# Altium integrated library amin-lib.IntLib: 231 symbols (part 2 of 2)
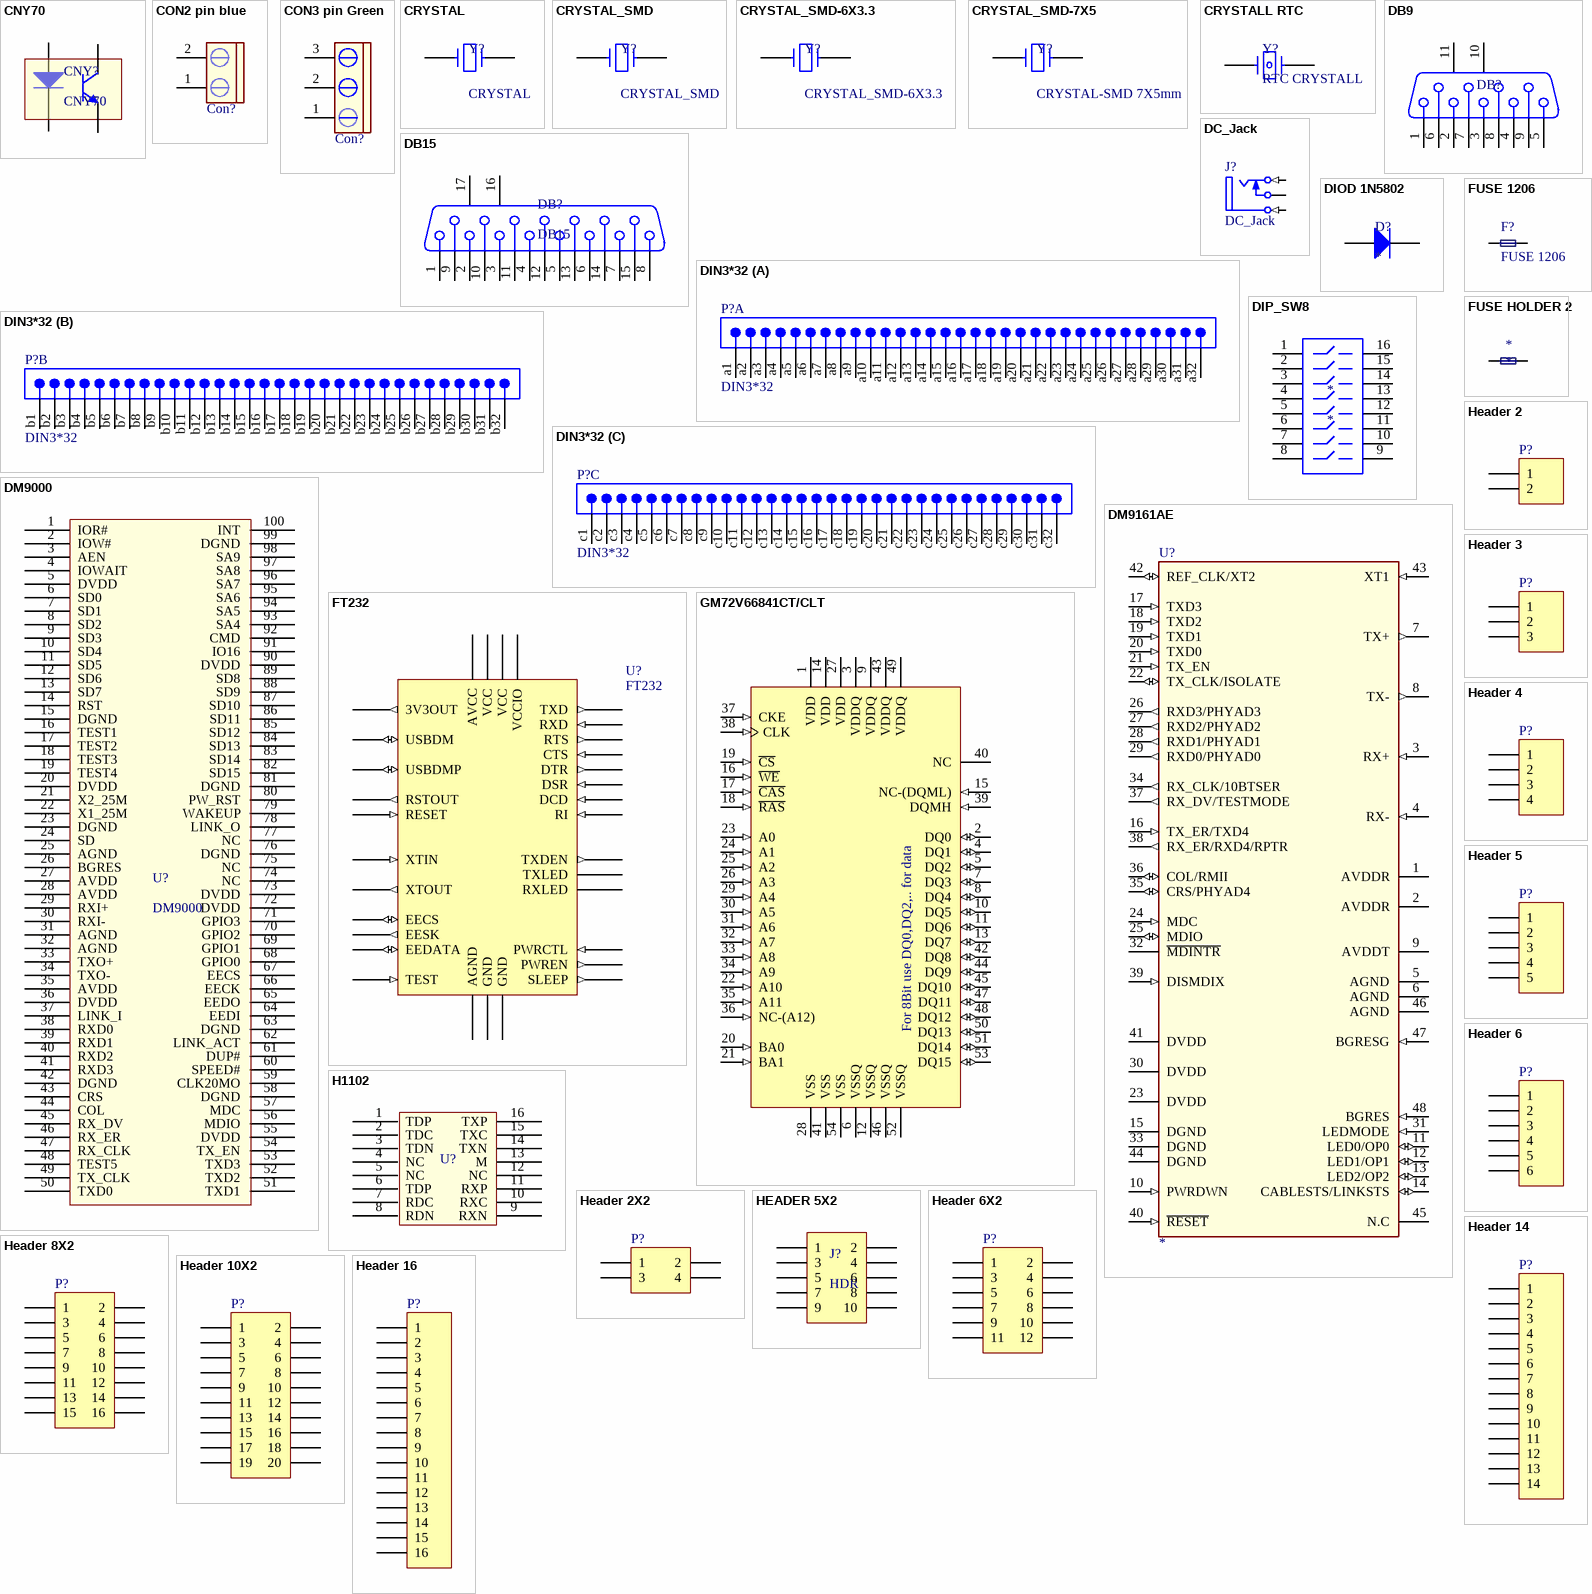
[diagram p12: symbols CNY70 to Header 16]

## DIN3*32
designator P?
Eurocard DIN 41612, Type C, 96 Position, Rows a+b+c, Performance level 1, Male, Lead 3.0 mm, Pitch 2.54 mm; DrillSize: Corresponds to nominal value.; Published: 6-Oct-2005; DatasheetDocument: 02-Jun-2003; PackageDocument: 03-Jul-2000; PackageReference: 0903196x922; Publisher: Altium Limited; ComponentLink1Description: Manufacturer Link; ComponentLink1URL: http://www.harting.com/; ComponentLink2Description: Packaging Specification; ComponentLink2URL: http://www.harkis.harting.com/_gds/pdf/TB_0903196x922_BL01_R27486.pdf
footprint DIN3*32_FOOT
footprint DIN3*32_FOOT - SIM
footprint DIN3*32_FOOT MRA
part A pins: a1, a2, a3, a4, a5, a6, a7, a8, a9, a10, a11, a12, a13, a14, a15, a16, a17, a18, a19, a20, a21, a22, a23, a24, a25, a26, a27, a28, a29, a30, a31, a32
part B pins: b1, b2, b3, b4, b5, b6, b7, b8, b9, b10, b11, b12, b13, b14, b15, b16, b17, b18, b19, b20, b21, b22, b23, b24, b25, b26, b27, b28, b29, b30, b31, b32
part C pins: c1, c2, c3, c4, c5, c6, c7, c8, c9, c10, c11, c12, c13, c14, c15, c16, c17, c18, c19, c20, c21, c22, c23, c24, c25, c26, c27, c28, c29, c30, c31, c32

## DIOD 1N5802
designator D?
footprint MY_DIOD_1N5822
pins: 1 A, 2 K

## DIP_SW8
designator *
footprint MY_DIP_SW8 (DIP SWITCH 8 PIN)
pins: 1, 2, 3, 4, 5, 6, 7, 8, 9, 10, 11, 12, 13, 14, 15, 16

## DM9000
designator U?
ETHERNET PHY LAYER
footprint MY_LQFP100
pins: 1 IOR#, 2 IOW#, 3 AEN, 4 IOWAIT, 5 DVDD, 6 SD0, 7 SD1, 8 SD2, 9 SD3, 10 SD4, 11 SD5, 12 SD6, 13 SD7, 14 RST, 15 DGND, 16 TEST1, 17 TEST2, 18 TEST3, 19 TEST4, 20 DVDD, 21 X2_25M, 22 X1_25M, 23 DGND, 24 SD, 25 AGND, 26 BGRES, 27 AVDD, 28 AVDD, 29 RXI+, 30 RXI-, 31 AGND, 32 AGND, 33 TXO+, 34 TXO-, 35 AVDD, 36 DVDD, 37 LINK_I, 38 RXD0, 39 RXD1, 40 RXD2, 41 RXD3, 42 DGND, 43 CRS, 44 COL, 45 RX_DV, 46 RX_ER, 47 RX_CLK, 48 TEST5, 49 TX_CLK, 50 TXD0, 51 TXD1, 52 TXD2, 53 TXD3, 54 TX_EN, 55 DVDD, 56 MDIO, 57 MDC, 58 DGND, 59 CLK20MO, 60 SPEED#, 61 DUP#, 62 LINK_ACT, 63 DGND, 64 EEDI, 65 EEDO, 66 EECK, 67 EECS, 68 GPIO0, 69 GPIO1, 70 GPIO2, 71 GPIO3, 72 DVDD, 73 DVDD, 74 NC, 75 NC, 76 DGND, 77 NC, 78 LINK_O, 79 WAKEUP, 80 PW_RST, 81 DGND, 82 SD15, 83 SD14, 84 SD13, 85 SD12, 86 SD11, 87 SD10, 88 SD9, 89 SD8, 90 DVDD, 91 IO16, 92 CMD, 93 SA4, 94 SA5, 95 SA6, 96 SA7, 97 SA8, 98 SA9, 99 DGND, 100 INT

## DM9161AE
designator U?
Ethernet PHY
footprint MY_LQFP48 (TSQFP, 48-Leads, Body 9.0x9.0mm (max), Pitch 0.50mm, IPC Medium Density)
3D model AT90C8534-48A (PCB3D Model)
pins: 1 AVDDR (power), 2 AVDDR (power), 3 RX+ (in), 4 RX- (in), 5 AGND (power), 6 AGND (power), 7 TX+ (out), 8 TX- (out), 9 AVDDT (power), 10 PWRDWN (in), 11 LED0/OP0 (io), 12 LED1/OP1 (io), 13 LED2/OP2 (io), 14 CABLESTS/LINKSTS (io), 15 DGND (power), 16 TX_ER/TXD4 (in), 17 TXD3 (in), 18 TXD2 (in), 19 TXD1 (in), 20 TXD0 (in), 21 TX_EN (in), 22 TX_CLK/ISOLATE (io), 23 DVDD (power), 24 MDC (in), 25 MDIO (io), 26 RXD3/PHYAD3 (out), 27 RXD2/PHYAD2 (out), 28 RXD1/PHYAD1 (out), 29 RXD0/PHYAD0 (out), 30 DVDD (power), 31 LEDMODE (in), 32 ~{MDINTR} (hiz), 33 DGND (power), 34 RX_CLK/10BTSER (out), 35 CRS/PHYAD4 (io), 36 COL/RMII (io), 37 RX_DV/TESTMODE (out), 38 RX_ER/RXD4/RPTR (out), 39 DISMDIX (in), 40 ~{RESET} (in), 41 DVDD (power), 42 REF_CLK/XT2 (io), 43 XT1 (in), 44 DGND (power), 45 N.C, 46 AGND (power), 47 BGRESG (in), 48 BGRES (in)

## FT232
designator U?
USB to RS232 Convertor
footprint My_TQFP-32
pins: 1 EESK (out), 2 EEDATA (io), 3 VCC (power), 4 RESET (in), 5 RSTOUT (out), 6 3V3OUT (out), 7 USBDMP (io), 8 USBDM (io), 9 GND (power), 10 SLEEP (out), 11 RXLED (oc), 12 TXLED (oc), 13 VCCIO (power), 14 PWRCTL (in), 15 PWREN (out), 16 TXDEN (out), 17 GND (power), 18 RI (in), 19 DCD (in), 20 DSR (in), 21 DTR (out), 22 CTS (in), 23 RTS (out), 24 RXD (in), 25 TXD (out), 26 VCC (power), 27 XTIN (in), 28 XTOUT (out), 29 AGND (power), 30 AVCC (power), 31 TEST (in), 32 EECS (io)

## FUSE 1206
designator F?
footprint FUSE1206
pins: 1, 2

## FUSE HOLDER 2
designator *
footprint FUSE_HOLDER 2
pins: 1, 2

## GM72V66841CT/CLT
designator U?
2,097,152 WORD x 8 BIT x 4 BANK  SYNCHRONOUS DYNAMIC RAM
footprint MY_TSOP_54
pins: 1 VDD (power) "Power Supply", 2 DQ0 (io) "Data Input/Output 0", 3 VDDQ (power) "DQ Power", 4 DQ1 (io) "Data Input/Output 1", 5 DQ2 (io) "Data Input/Output 2", 6 VSSQ (power) "DQ Ground", 7 DQ3 (io) "Data Input/Output 3", 8 DQ4 (io) "Data Input/Output 4", 9 VDDQ (power) "DQ Power", 10 DQ5 (io) "Data Input/Output 5", 11 DQ6 (io) "Data Input/Output 6", 12 VSSQ (power) "DQ Ground", 13 DQ7 (io) "Data Input/Output 7", 14 VDD (power) "Power Supply", 15 NC-(DQML) (in) "Input/Output Mask for DQ0-DQ7", 16 ~{WE} (in) "Command Input", 17 ~{CAS} (in) "Command Input", 18 ~{RAS} (in) "Command Input", 19 ~{CS} (in) "Chip Select", 20 BA0 (in) "Bank Address Input 0", 21 BA1 (in) "Bank Address Input 1", 22 A10 (in) "Address Input 10", 23 A0 (in) "Address Input 0", 24 A1 (in) "Address Input 1", 25 A2 (in) "Address Input 2", 26 A3 (in) "Address Input 3", 27 VDD (power) "Power Supply", 28 VSS (power) "Ground", 29 A4 (in) "Address Input 4", 30 A5 (in) "Address Input 5", 31 A6 (in) "Address Input 6", 32 A7 (in) "Address Input 7", 33 A8 (in) "Address Input 8", 34 A9 (in) "Address Input 9", 35 A11 (in) "Address Input 11", 36 NC-(A12) (in) "Address Input 12", 37 CKE (in) "Clock Enable", 38 CLK (in) "Clock", 39 DQMH (in) "Input/Output Mask for DQ8-DQ15", 40 NC "No Connect", 41 VSS (power) "Ground", 42 DQ8 (io) "Data Input/Output 8", 43 VDDQ (power) "DQ Power", 44 DQ9 (io) "Data Input/Output 9", 45 DQ10 (io) "Data Input/Output 10", 46 VSSQ (power) "DQ Ground", 47 DQ11 (io) "Data Input/Output 11", 48 DQ12 (io) "Data Input/Output 12", 49 VDDQ (power) "DQ Power", 50 DQ13 (io) "Data Input/Output 13", 51 DQ14 (io) "Data Input/Output 14", 52 VSSQ (power) "DQ Ground", 53 DQ15 (io) "Data Input/Output 15", 54 VSS (power) "Ground"
text: For 8Bit use DQ0,DQ2,.. for data

## H1102
designator U?
footprint MY_H1102
pins: 1 TDP, 2 TDC, 3 TDN, 4 NC, 5 NC, 6 TDP, 7 RDC, 8 RDN, 9 RXN, 10 RXC, 11 RXP, 12 NC, 13 M, 14 TXN, 15 TXC, 16 TXP

## Header 2
designator P?  (value not drawn)
Header, 2-Pin; LatestRevisionDate: 17-Jul-2002; LatestRevisionNote: Re-released for DXP Platform.; Publisher: Altium Limited
footprint My_1X02
signal-integrity model Connector
pins: 1, 2

## Header 2X2
designator P?  (value not drawn)
Header, 2-Pin, Dual row; LatestRevisionDate: 17-Jul-2002; LatestRevisionNote: Re-released for DXP Platform.; Publisher: Altium Limited
footprint My_2X02
signal-integrity model Connector
pins: 1, 2, 3, 4

## Header 3
designator P?  (value not drawn)
Header, 3-Pin; LatestRevisionDate: 17-Jul-2002; LatestRevisionNote: Re-released for DXP Platform.; Publisher: Altium Limited
footprint My_1X03
signal-integrity model Connector
pins: 1, 2, 3

## Header 4
designator P?  (value not drawn)
Header, 4-Pin; LatestRevisionDate: 17-Jul-2002; LatestRevisionNote: Re-released for DXP Platform.; Publisher: Altium Limited
footprint My_1X04
signal-integrity model Connector
pins: 1, 2, 3, 4

## Header 5
designator P?  (value not drawn)
Header, 5-Pin; LatestRevisionDate: 17-Jul-2002; LatestRevisionNote: Re-released for DXP Platform.; Publisher: Altium Limited
footprint My_1X05
signal-integrity model Connector
pins: 1, 2, 3, 4, 5

## HEADER 5X2
designator J?, comment HDR
footprint MY_HDR2X5
pins: 1, 2, 3, 4, 5, 6, 7, 8, 9, 10

## Header 6
designator P?  (value not drawn)
Header, 6-Pin; LatestRevisionDate: 17-Jul-2002; LatestRevisionNote: Re-released for DXP Platform.; Publisher: Altium Limited
footprint My_1X06
signal-integrity model Connector
pins: 1, 2, 3, 4, 5, 6

## Header 6X2
designator P?  (value not drawn)
Header, 6-Pin, Dual row; LatestRevisionDate: 17-Jul-2002; LatestRevisionNote: Re-released for DXP Platform.; Publisher: Altium Limited
footprint My_2X06
signal-integrity model Connector
pins: 1, 2, 3, 4, 5, 6, 7, 8, 9, 10, 11, 12

## Header 8X2
designator P?  (value not drawn)
Header, 8-Pin, Dual row; LatestRevisionDate: 17-Jul-2002; LatestRevisionNote: Re-released for DXP Platform.; Publisher: Altium Limited
footprint My_2X08
signal-integrity model Connector
pins: 1, 2, 3, 4, 5, 6, 7, 8, 9, 10, 11, 12, 13, 14, 15, 16

## Header 10X2
designator P?  (value not drawn)
Header, 10-Pin, Dual row; LatestRevisionDate: 17-Jul-2002; LatestRevisionNote: Re-released for DXP Platform.; Publisher: Altium Limited
footprint My_2X10
signal-integrity model Connector
pins: 1, 2, 3, 4, 5, 6, 7, 8, 9, 10, 11, 12, 13, 14, 15, 16, 17, 18, 19, 20

## Header 14
designator P?  (value not drawn)
Header, 14-Pin; LatestRevisionDate: 17-Jul-2002; LatestRevisionNote: Re-released for DXP Platform.; Publisher: Altium Limited
footprint My_1X14
signal-integrity model Connector
pins: 1, 2, 3, 4, 5, 6, 7, 8, 9, 10, 11, 12, 13, 14

## Header 16
designator P?  (value not drawn)
Header, 16-Pin; LatestRevisionDate: 17-Jul-2002; LatestRevisionNote: Re-released for DXP Platform.; Publisher: Altium Limited
footprint My_1X16
signal-integrity model Connector
pins: 1, 2, 3, 4, 5, 6, 7, 8, 9, 10, 11, 12, 13, 14, 15, 16

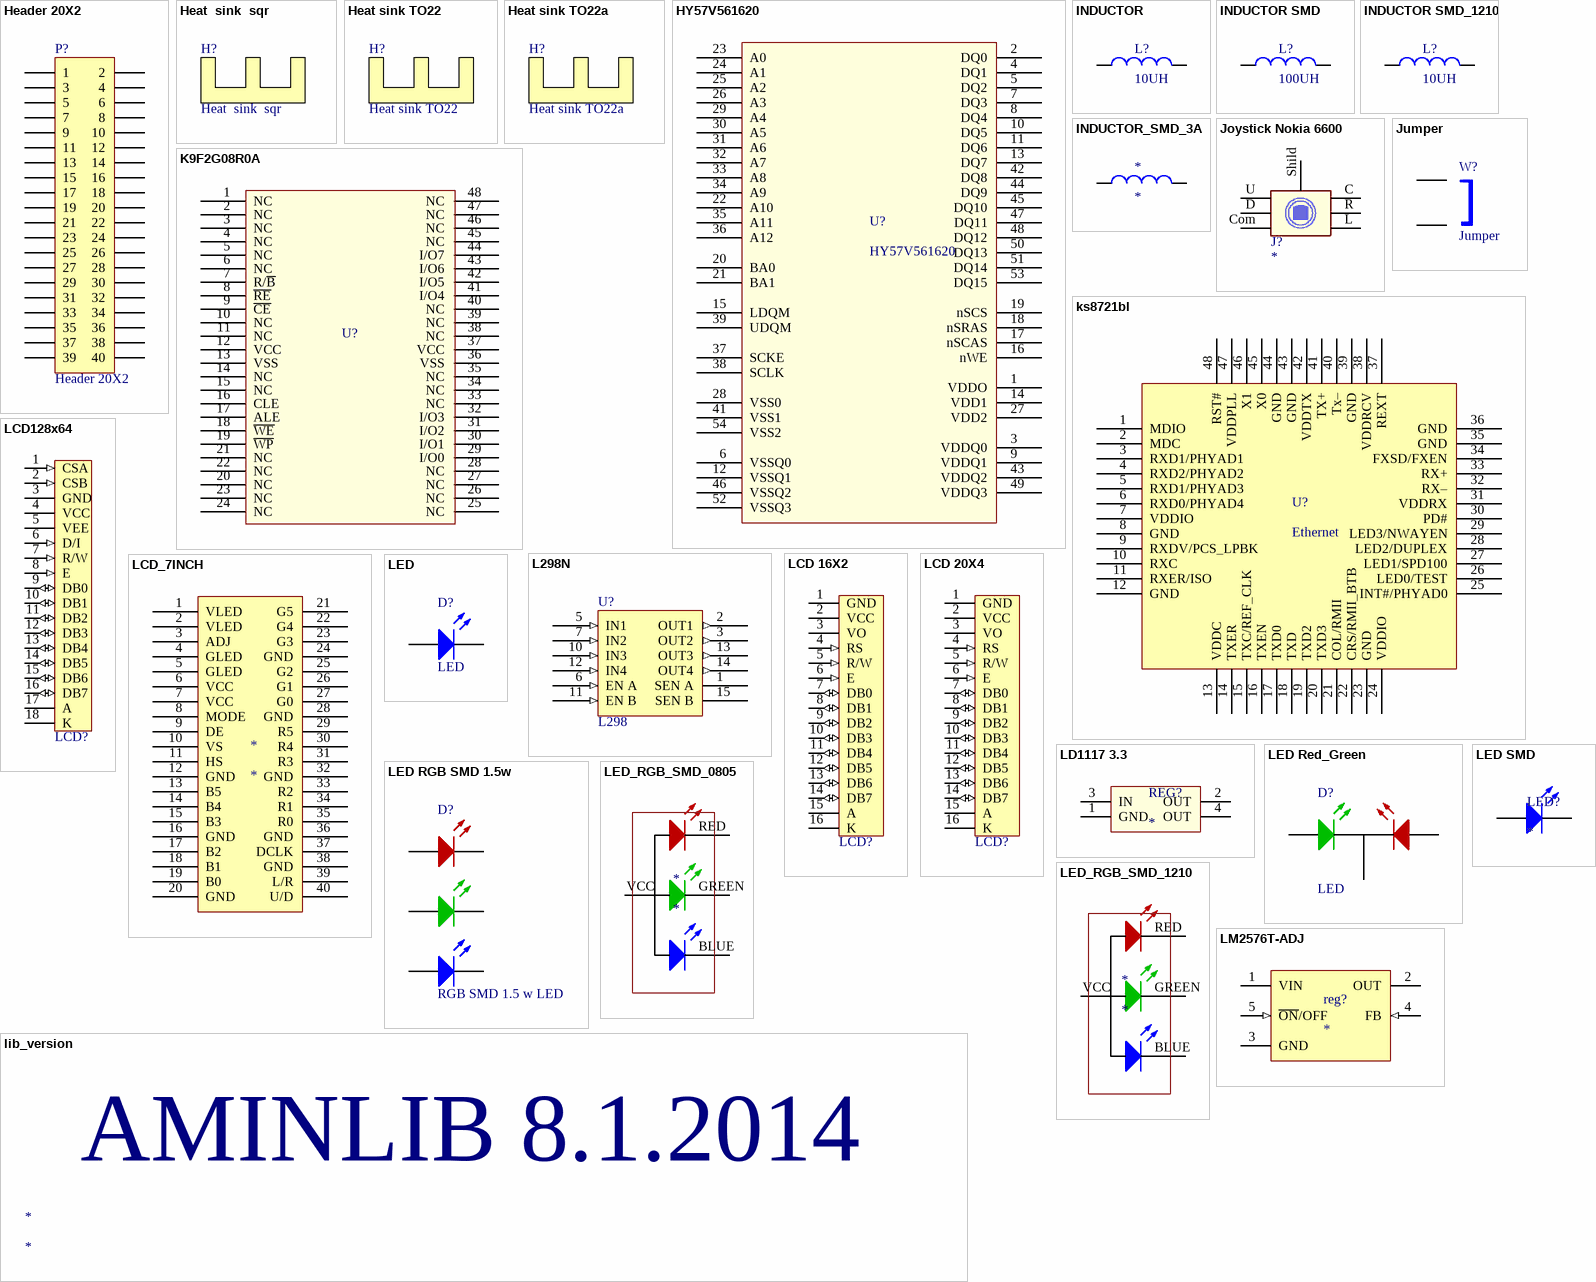
[diagram p6: symbols Header 20X2 to LM2576T-ADJ]

## Header 20X2
designator P?
Header, 20-Pin, Dual row; LatestRevisionDate: 17-Jul-2002; LatestRevisionNote: Re-released for DXP Platform.; Publisher: Altium Limited
signal-integrity model Connector
footprint My_IDCM40
footprint My_IDCM40A
footprint My_IDCRM40
pins: 1, 2, 3, 4, 5, 6, 7, 8, 9, 10, 11, 12, 13, 14, 15, 16, 17, 18, 19, 20, 21, 22, 23, 24, 25, 26, 27, 28, 29, 30, 31, 32, 33, 34, 35, 36, 37, 38, 39, 40

## Heat  sink  sqr
designator H?
Heat sink sqr
footprint My_Heat_sink_sqr

## Heat sink TO22
designator H?
Heat sink for TO22
footprint My_Heat_sink_TO22

## Heat sink TO22a
designator H?
Heat sink for TO22
footprint My_Heat_sink_TO22a

## HY57V561620
designator U?
4Banks x 4M x 16Bit Synchronous DRAM 32MB
footprint TSOP54
pins: 1 VDDO, 2 DQ0, 3 VDDQ0, 4 DQ1, 5 DQ2, 6 VSSQ0, 7 DQ3, 8 DQ4, 9 VDDQ1, 10 DQ5, 11 DQ6, 12 VSSQ1, 13 DQ7, 14 VDD1, 15 LDQM, 16 nWE, 17 nSCAS, 18 nSRAS, 19 nSCS, 20 BA0, 21 BA1, 22 A10, 23 A0, 24 A1, 25 A2, 26 A3, 27 VDD2, 28 VSS0, 29 A4, 30 A5, 31 A6, 32 A7, 33 A8, 34 A9, 35 A11, 36 A12, 37 SCKE, 38 SCLK, 39 UDQM, 41 VSS1, 42 DQ8, 43 VDDQ2, 44 DQ9, 45 DQ10, 46 VSSQ2, 47 DQ11, 48 DQ12, 49 VDDQ3, 50 DQ13, 51 DQ14, 52 VSSQ3, 53 DQ15, 54 VSS2

## INDUCTOR
designator L?, comment 10UH
footprint MY_AXIAL 0.5
pins: 1, 2

## INDUCTOR SMD
designator L?, comment 100UH
footprint MY_SMD_INDUCTOR
pins: 1, 2

## INDUCTOR SMD_1210
designator L?, comment 10UH
footprint MY_SMD_INDUCTOR
footprint MY_INDUCTOR_1210
pins: 1, 2

## INDUCTOR_SMD_3A
designator *
footprint INDUCTOR_SMD_3A
pins: 1, 2

## Joystick Nokia 6600
designator J?
Joystick keypad
footprint MY_6600_Joystick
pins: C, Com C, D, L, R, Shild, U

## Jumper
designator W?
Jumper Wire; Manufacturer: Generic Components; Published: 1999
footprint My_IDC-2
pins: 1, 2

## K9F2G08R0A
designator U?
256M x 8 Bit NAND Flash Memory
footprint MY_TSOP1-48
pins: 1 NC, 2 NC, 3 NC, 4 NC, 5 NC, 6 NC, 7 R/~{B}, 8 ~{RE}, 9 ~{CE}, 10 NC, 11 NC, 12 VCC, 13 VSS, 14 NC, 15 NC, 16 CLE, 17 ALE, 18 ~{WE}, 19 ~{WP}, 20 NC, 21 NC, 22 NC, 23 NC, 24 NC, 25 NC, 26 NC, 27 NC, 28 NC, 29 I/O0, 30 I/O1, 31 I/O2, 32 I/O3, 33 NC, 34 NC, 35 NC, 36 VSS, 37 VCC, 38 NC, 39 NC, 40 NC, 41 I/O4, 42 I/O5, 43 I/O6, 44 I/O7, 45 NC, 46 NC, 47 NC, 48 NC

## ks8721bl
designator U?, comment Ethernet
3.3V Single Power Supply 10/100BASE-TX/FX  MII Physical Layer Transceiver
footprint my_ks8721
pins: 1 MDIO, 2 MDC, 3 RXD1/PHYAD1, 4 RXD2/PHYAD2, 5 RXD1/PHYAD3, 6 RXD0/PHYAD4, 7 VDDIO, 8 GND, 9 RXDV/PCS_LPBK, 10 RXC, 11 RXER/ISO, 12 GND, 13 VDDC, 14 TXER, 15 TXC/REF_CLK, 16 TXEN, 17 TXD0, 18 TXD, 19 TXD2, 20 TXD3, 21 COL/RMII, 22 CRS/RMII_BTB, 23 GND, 24 VDDIO, 25 INT#/PHYAD0, 26 LED0/TEST, 27 LED1/SPD100, 28 LED2/DUPLEX, 29 LED3/NWAYEN, 30 PD#, 31 VDDRX, 32 RX–, 33 RX+, 34 FXSD/FXEN, 35 GND, 36 GND, 37 REXT, 38 VDDRCV, 39 GND, 40 Tx–, 41 TX+, 42 VDDTX, 43 GND, 44 GND, 45 X0, 46 X1, 47 VDDPLL, 48 RST#

## L298N
designator U?, comment L298
Dual Full Bridge Driver; Text Field1: TAB CONNECTED TO PIN 8.
footprint My_ZIP-15V
pins: 1 SEN A, 2 OUT1 (out), 3 OUT2 (out), 4 VS (power) hidden to VS, 5 IN1 (in), 6 EN A (in), 7 IN2 (in), 8 GND (power) hidden to GND, 9 VSS (power) hidden to VSS, 10 IN3 (in), 11 EN B (in), 12 IN4 (in), 13 OUT3 (out), 14 OUT4 (out), 15 SEN B

## LCD128x64
designator LCD?, comment LCD 128X64  (value not drawn)
Graphic LCD with KS108 Controller
footprint My_LCD128x64
pins: 1 CSA (in), 2 CSB (in), 3 GND (power), 4 VCC (power), 5 VEE (power), 6 D/I (in), 7 R/W (in), 8 E (in), 9 DB0 (io), 10 DB1 (io), 11 DB2 (io), 12 DB3 (io), 13 DB4 (io), 14 DB5 (io), 15 DB6 (io), 16 DB7 (io), 17 A, 18 K

## LCD 16X2
designator LCD?  (value not drawn)
LCD 16X2 Character lcd
footprint My_LCD 16x2-A
pins: 1 GND (power), 2 VCC (power), 3 VO, 4 RS (in), 5 R/W (in), 6 E (in), 7 DB0 (io), 8 DB1 (io), 9 DB2 (io), 10 DB3 (io), 11 DB4 (io), 12 DB5 (io), 13 DB6 (io), 14 DB7 (io), 15 A, 16 K

## LCD 20X4
designator LCD?  (value not drawn)
LCD 20X4 Character lcd
footprint My_LCD 20x4-A
footprint My_LCD 20x4-B
pins: 1 GND (power), 2 VCC (power), 3 VO, 4 RS (in), 5 R/W (in), 6 E (in), 7 DB0 (io), 8 DB1 (io), 9 DB2 (io), 10 DB3 (io), 11 DB4 (io), 12 DB5 (io), 13 DB6 (io), 14 DB7 (io), 15 A, 16 K

## LCD_7INCH
designator *
footprint MY_TFT_LCD40
pins: 1 VLED, 2 VLED, 3 ADJ, 4 GLED, 5 GLED, 6 VCC, 7 VCC, 8 MODE, 9 DE, 10 VS, 11 HS, 12 GND, 13 B5, 14 B4, 15 B3, 16 GND, 17 B2, 18 B1, 19 B0, 20 GND, 21 G5, 22 G4, 23 G3, 24 GND, 25 G2, 26 G1, 27 G0, 28 GND, 29 R5, 30 R4, 31 R3, 32 GND, 33 R2, 34 R1, 35 R0, 36 GND, 37 DCLK, 38 GND, 39 L/R, 40 U/D

## LD1117 3.3
designator REG?
footprint MY_LD1117-3.3
pins: 1 GND (power), 2 OUT (power), 3 IN (power), 4 OUT (power)

## LED
designator D?
Typical INFRARED GaAs LED; Published: 8-Jun-2000; LatestRevisionDate: 08-Jul-2005; LatestRevisionNote: Mech Layer 1 removed.; Publisher: Altium Limited
footprint My_LED3MM
footprint MY_LED5MM
pins: A, K

## LED Red_Green
designator D?, comment LED
Typical INFRARED GaAs LED; Published: 8-Jun-2000; LatestRevisionDate: 08-Jul-2005; LatestRevisionNote: Mech Layer 1 removed.; Publisher: Altium Limited
footprint My_DUOLED5MM
pins: AG, AR, K

## LED RGB SMD 1.5w
designator D?, comment RGB SMD 1.5 w LED
Enhanced Power RGB LED
footprint MY_RGB_SMD_1.5w
pins: AB A, AG A, AR A, KB K, KG K, KR K

## LED SMD
designator LED?
footprint MY_LED_SMD
pins: 1 A, 2 K

## LED_RGB_SMD_0805
designator *
footprint LED_RGB_SMD_0805
pins: BLUE, GREEN, RED, VCC

## LED_RGB_SMD_1210
designator *
footprint LED_RGB_SMD_1210
pins: BLUE, GREEN, RED, VCC

## lib_version
designator *
text: AMINLIB 8.1.2014

## LM2576T-ADJ
designator reg?
footprint MY_TO5A
footprint MY_TS58
pins: 1 VIN (power), 2 OUT (power), 3 GND (power), 4 FB (in), 5 ~{ON}/OFF (in)

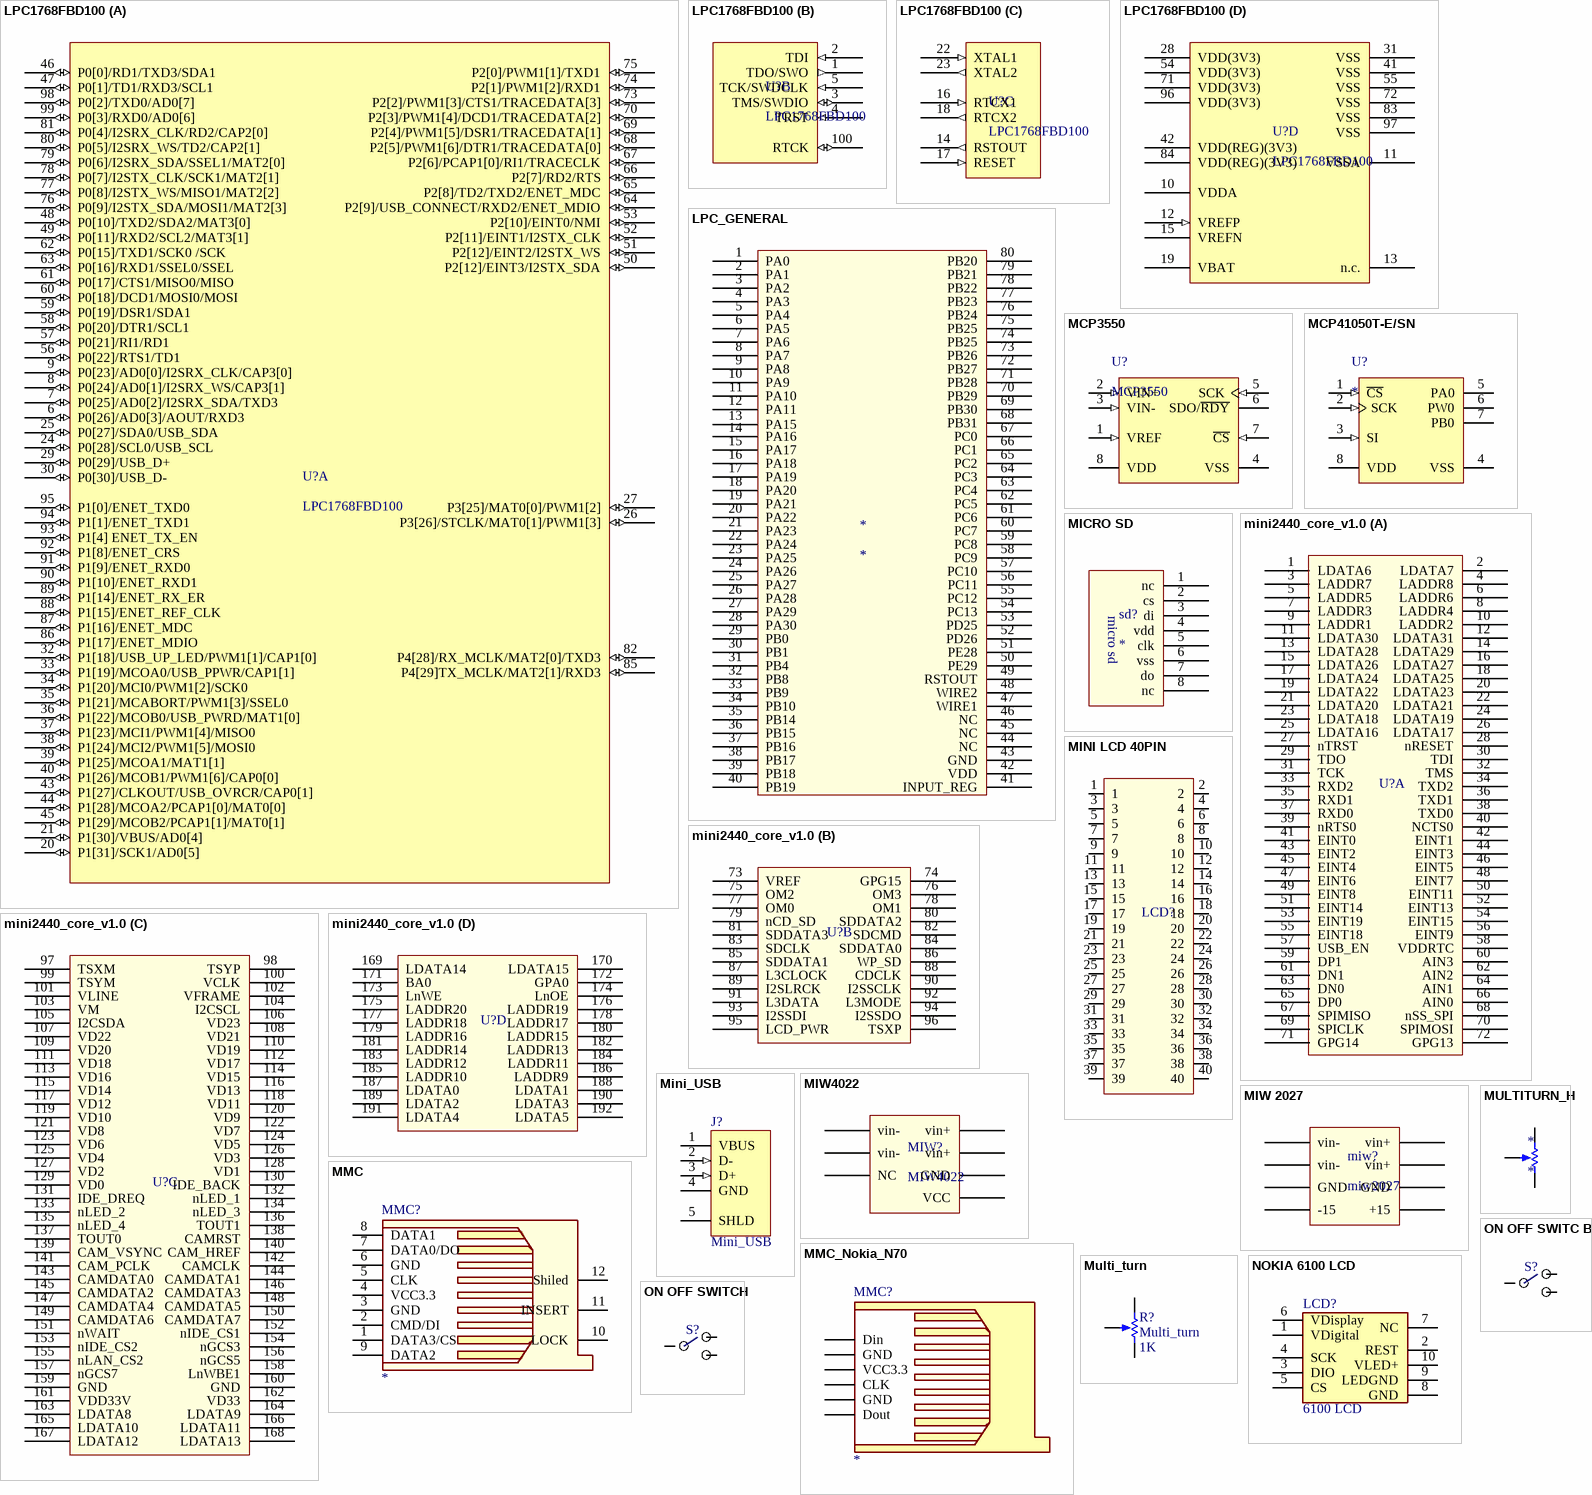
[diagram p7: symbols LPC1768FBD100 to ON OFF SWITCH]

## LPC1768FBD100
designator U?
footprint MY_LPC
part A pins: 6 P0[26]/AD0[3]/AOUT/RXD3 (io), 7 P0[25]/AD0[2]/I2SRX_SDA/TXD3 (io), 8 P0[24]/AD0[1]/I2SRX_WS/CAP3[1] (io), 9 P0[23]/AD0[0]/I2SRX_CLK/CAP3[0] (io), 20 P1[31]/SCK1/AD0[5] (io), 21 P1[30]/VBUS/AD0[4] (io), 24 P0[28]/SCL0/USB_SCL (io), 25 P0[27]/SDA0/USB_SDA (io), 26 P3[26]/STCLK/MAT0[1]/PWM1[3] (io), 27 P3[25]/MAT0[0]/PWM1[2] (io), 29 P0[29]/USB_D+ (io), 30 P0[30]/USB_D- (io), 32 P1[18]/USB_UP_LED/PWM1[1]/CAP1[0] (io), 33 P1[19]/MCOA0/USB_PPWR/CAP1[1] (io), 34 P1[20]/MCI0/PWM1[2]/SCK0 (io), 35 P1[21]/MCABORT/PWM1[3]/SSEL0 (io), 36 P1[22]/MCOB0/USB_PWRD/MAT1[0] (io), 37 P1[23]/MCI1/PWM1[4]/MISO0 (io), 38 P1[24]/MCI2/PWM1[5]/MOSI0 (io), 39 P1[25]/MCOA1/MAT1[1] (io), 40 P1[26]/MCOB1/PWM1[6]/CAP0[0] (io), 43 P1[27]/CLKOUT/USB_OVRCR/CAP0[1] (io), 44 P1[28]/MCOA2/PCAP1[0]/MAT0[0] (io), 45 P1[29]/MCOB2/PCAP1[1]/MAT0[1] (io), 46 P0[0]/RD1/TXD3/SDA1 (io), 47 P0[1]/TD1/RXD3/SCL1 (io), 48 P0[10]/TXD2/SDA2/MAT3[0] (io), 49 P0[11]/RXD2/SCL2/MAT3[1] (io), 50 P2[12]/EINT3/I2STX_SDA (io), 51 P2[12]/EINT2/I2STX_WS (io), 52 P2[11]/EINT1/I2STX_CLK (io), 53 P2[10]/EINT0/NMI (io), 56 P0[22]/RTS1/TD1 (io), 57 P0[21]/RI1/RD1 (io), 58 P0[20]/DTR1/SCL1 (io), 59 P0[19]/DSR1/SDA1 (io), 60 P0[18]/DCD1/MOSI0/MOSI (io), 61 P0[17]/CTS1/MISO0/MISO (io), 62 P0[15]/TXD1/SCK0 /SCK (io), 63 P0[16]/RXD1/SSEL0/SSEL (io), 64 P2[9]/USB_CONNECT/RXD2/ENET_MDIO (io), 65 P2[8]/TD2/TXD2/ENET_MDC (io), 66 P2[7]/RD2/RTS (io), 67 P2[6]/PCAP1[0]/RI1/TRACECLK (io), 68 P2[5]/PWM1[6]/DTR1/TRACEDATA[0] (io), 69 P2[4]/PWM1[5]/DSR1/TRACEDATA[1] (io), 70 P2[3]/PWM1[4]/DCD1/TRACEDATA[2] (io), 73 P2[2]/PWM1[3]/CTS1/TRACEDATA[3] (io), 74 P2[1]/PWM1[2]/RXD1 (io), 75 P2[0]/PWM1[1]/TXD1 (io), 76 P0[9]/I2STX_SDA/MOSI1/MAT2[3] (io), 77 P0[8]/I2STX_WS/MISO1/MAT2[2] (io), 78 P0[7]/I2STX_CLK/SCK1/MAT2[1] (io), 79 P0[6]/I2SRX_SDA/SSEL1/MAT2[0] (io), 80 P0[5]/I2SRX_WS/TD2/CAP2[1] (io), 81 P0[4]/I2SRX_CLK/RD2/CAP2[0] (io), 82 P4[28]/RX_MCLK/MAT2[0]/TXD3 (io), 85 P4[29]TX_MCLK/MAT2[1]/RXD3 (io), 86 P1[17]/ENET_MDIO (io), 87 P1[16]/ENET_MDC (io), 88 P1[15]/ENET_REF_CLK (io), 89 P1[14]/ENET_RX_ER (io), 90 P1[10]/ENET_RXD1 (io), 91 P1[9]/ENET_RXD0 (io), 92 P1[8]/ENET_CRS (io), 93 P1[4] ENET_TX_EN (io), 94 P1[1]/ENET_TXD1 (io), 95 P1[0]/ENET_TXD0 (io), 98 P0[2]/TXD0/AD0[7] (io), 99 P0[3]/RXD0/AD0[6] (io)
part B pins: 1 TDO/SWO (out), 2 TDI (in), 3 TMS/SWDIO (io), 4 TRST (in), 5 TCK/SWDCLK (in), 100 RTCK (io)
part C pins: 14 RSTOUT (out), 16 RTCX1 (in), 17 RESET (in), 18 RTCX2 (out), 22 XTAL1 (in), 23 XTAL2 (out)
part D pins: 10 VDDA, 11 VSSA (power), 12 VREFP (in), 13 n.c., 15 VREFN, 19 VBAT, 28 VDD(3V3) (power), 31 VSS (power), 41 VSS (power), 42 VDD(REG)(3V3) (power), 54 VDD(3V3) (power), 55 VSS (power), 71 VDD(3V3) (power), 72 VSS (power), 83 VSS (power), 84 VDD(REG)(3V3) (power), 96 VDD(3V3) (power), 97 VSS (power)

## LPC_GENERAL
designator *
footprint LPC_general
pins: 1 PA0, 2 PA1, 3 PA2, 4 PA3, 5 PA4, 6 PA5, 7 PA6, 8 PA7, 9 PA8, 10 PA9, 11 PA10, 12 PA11, 13 PA15, 14 PA16, 15 PA17, 16 PA18, 17 PA19, 18 PA20, 19 PA21, 20 PA22, 21 PA23, 22 PA24, 23 PA25, 24 PA26, 25 PA27, 26 PA28, 27 PA29, 28 PA30, 29 PB0, 30 PB1, 31 PB4, 32 PB8, 33 PB9, 34 PB10, 35 PB14, 36 PB15, 37 PB16, 38 PB17, 39 PB18, 40 PB19, 41 INPUT_REG, 42 VDD, 43 GND, 44 NC, 45 NC, 46 NC, 47 WIRE1, 48 WIRE2, 49 RSTOUT, 50 PE29, 51 PE28, 52 PD26, 53 PD25, 54 PC13, 55 PC12, 56 PC11, 57 PC10, 58 PC9, 59 PC8, 60 PC7, 61 PC6, 62 PC5, 63 PC4, 64 PC3, 65 PC2, 66 PC1, 67 PC0, 68 PB31, 69 PB30, 70 PB29, 71 PB28, 72 PB27, 73 PB26, 74 PB25, 75 PB25, 76 PB24, 77 PB23, 78 PB22, 79 PB21, 80 PB20

## MCP3550
designator U?
Low-Power, Single-Channel 22-Bit Delta-Sigma ADC, 8-Pin MSOP, Extended Temperature
footprint MY_MCP3550
pins: 1 VREF (in), 2 VIN+ (in), 3 VIN- (in), 4 VSS (power), 5 SCK (in), 6 SDO/~{RDY} (hiz), 7 ~{CS} (in), 8 VDD (power)

## MCP41050T-E/SN
designator U?
8-Pin SOIC 150mil, Extended Temperature, Tape and Reel
footprint My_DIP8
footprint MY_MCP3550
pins: 1 ~{CS} (in), 2 SCK (in), 3 SI (in), 4 VSS (power), 5 PA0, 6 PW0, 7 PB0, 8 VDD (power)

## MICRO SD
designator sd?
footprint MY_MICRO_SD
pins: 1 nc, 2 cs, 3 di, 4 vdd, 5 clk, 6 vss, 7 do, 8 nc
text: micro sd

## mini2440_core_v1.0
designator U?
mini2440 core pardazesh sabz v1.0
footprint MINI2440_CORE_REV_A
part A pins: 1 LDATA6, 2 LDATA7, 3 LADDR7, 4 LADDR8, 5 LADDR5, 6 LADDR6, 7 LADDR3, 8 LADDR4, 9 LADDR1, 10 LADDR2, 11 LDATA30, 12 LDATA31, 13 LDATA28, 14 LDATA29, 15 LDATA26, 16 LDATA27, 17 LDATA24, 18 LDATA25, 19 LDATA22, 20 LDATA23, 21 LDATA20, 22 LDATA21, 23 LDATA18, 24 LDATA19, 25 LDATA16, 26 LDATA17, 27 nTRST, 28 nRESET, 29 TDO, 30 TDI, 31 TCK, 32 TMS, 33 RXD2, 34 TXD2, 35 RXD1, 36 TXD1, 37 RXD0, 38 TXD0, 39 nRTS0, 40 NCTS0, 41 EINT0, 42 EINT1, 43 EINT2, 44 EINT3, 45 EINT4, 46 EINT5, 47 EINT6, 48 EINT7, 49 EINT8, 50 EINT11, 51 EINT14, 52 EINT13, 53 EINT19, 54 EINT15, 55 EINT18, 56 EINT9, 57 USB_EN, 58 VDDRTC, 59 DP1, 60 AIN3, 61 DN1, 62 AIN2, 63 DN0, 64 AIN1, 65 DP0, 66 AIN0, 67 SPIMISO, 68 nSS_SPI, 69 SPICLK, 70 SPIMOSI, 71 GPG14, 72 GPG13
part B pins: 73 VREF, 74 GPG15, 75 OM2, 76 OM3, 77 OM0, 78 OM1, 79 nCD_SD, 80 SDDATA2, 81 SDDATA3, 82 SDCMD, 83 SDCLK, 84 SDDATA0, 85 SDDATA1, 86 WP_SD, 87 L3CLOCK, 88 CDCLK, 89 I2SLRCK, 90 I2SSCLK, 91 L3DATA, 92 L3MODE, 93 I2SSDI, 94 I2SSDO, 95 LCD_PWR, 96 TSXP
part C pins: 97 TSXM, 98 TSYP, 99 TSYM, 100 VCLK, 101 VLINE, 102 VFRAME, 103 VM, 104 I2CSCL, 105 I2CSDA, 106 VD23, 107 VD22, 108 VD21, 109 VD20, 110 VD19, 111 VD18, 112 VD17, 113 VD16, 114 VD15, 115 VD14, 116 VD13, 117 VD12, 118 VD11, 119 VD10, 120 VD9, 121 VD8, 122 VD7, 123 VD6, 124 VD5, 125 VD4, 126 VD3, 127 VD2, 128 VD1, 129 VD0, 130 IDE_BACK, 131 IDE_DREQ, 132 nLED_1, 133 nLED_2, 134 nLED_3, 135 nLED_4, 136 TOUT1, 137 TOUT0, 138 CAMRST, 139 CAM_VSYNC, 140 CAM_HREF, 141 CAM_PCLK, 142 CAMCLK, 143 CAMDATA0, 144 CAMDATA1, 145 CAMDATA2, 146 CAMDATA3, 147 CAMDATA4, 148 CAMDATA5, 149 CAMDATA6, 150 CAMDATA7, 151 nWAIT, 152 nIDE_CS1, 153 nIDE_CS2, 154 nGCS3, 155 nLAN_CS2, 156 nGCS5, 157 nGCS7, 158 LnWBE1, 159 GND, 160 GND, 161 VDD33V, 162 VD33, 163 LDATA8, 164 LDATA9, 165 LDATA10, 166 LDATA11, 167 LDATA12, 168 LDATA13
part D pins: 169 LDATA14, 170 LDATA15, 171 BA0, 172 GPA0, 173 LnWE, 174 LnOE, 175 LADDR20, 176 LADDR19, 177 LADDR18, 178 LADDR17, 179 LADDR16, 180 LADDR15, 181 LADDR14, 182 LADDR13, 183 LADDR12, 184 LADDR11, 185 LADDR10, 186 LADDR9, 187 LDATA0, 188 LDATA1, 189 LDATA2, 190 LDATA3, 191 LDATA4, 192 LDATA5

## MINI LCD 40PIN
designator LCD?
footprint MINIBOARD_LCD_40PIN
pins: 1, 2, 3, 4, 5, 6, 7, 8, 9, 10, 11, 12, 13, 14, 15, 16, 17, 18, 19, 20, 21, 22, 23, 24, 25, 26, 27, 28, 29, 30, 31, 32, 33, 34, 35, 36, 37, 38, 39, 40

## Mini_USB
designator J?
USB 2.0, Right Angle, SMT, B Type, Receptacle, 5 Position, Black; ContactMaterial: Copper Alloy; ContactPlating: Gold (30); PCB_Layout: Complies with manufacturer's recommendation.; DrillSize: Corresponds to nominal value.; PanelGround: Without; Published: 15-Jul-2004; DatasheetDocument: 27-Jun-2003; PackageDocument: 27-Jun-2003; PackageReference: 440247; Publisher: Altium Limited; HousingMaterial: Thermoplastic; ComponentLink1Description: Manufacturer Link; ComponentLink1URL: http://www.tycoelectronics.com/; ComponentLink2Description: Packaging Specification; ComponentLink2URL: http://ecommas.tycoelectronics.com/commerce/DocumentDelivery/DDEController?Action=showdoc&DocId=Customer+Drawing%7F440247%7FD%7Fpdf%7FEnglish%7FC_440247_D.pdf
footprint My_USB
signal-integrity model USB2.0
pins: 1 VBUS (power) "Power", 2 D- (in) "-DATA", 3 D+ (in) "+DATA", 4 GND (power) "Ground", 5 SHLD "Shield"

## MIW4022
designator MIW?
DC TO DC CONVERTOR
footprint MY_MIW4042 (DC TO DC CONVERTOR)
pins: 2 vin-, 3 vin-, 11 NC, 14 VCC, 16 GND, 22 vin+, 23 vin+

## MIW 2027
designator miw?, comment miw2027
DC To DC Convertor
footprint MY_MIW 2027
pins: 2 vin-, 3 vin-, 9 GND, 11 -15, 14 +15, 16 GND, 22 vin+, 23 vin+

## MMC
designator MMC?
MMC/SD Card
footprint MY_MMC
footprint MY_SD-MMC_SOCKET-PP
footprint MY_SD_MMC
footprint MMC_BIG
pins: 1 DATA3/CS, 2 CMD/DI, 3 GND, 4 VCC3.3, 5 CLK, 6 GND, 7 DATA0/DO, 8 DATA1, 9 DATA2, 10 LOCK, 11 INSERT, 12 Shiled

## MMC_Nokia_N70
designator MMC?
MMC/SD Card
footprint MY_Nokia_N70_MMC
pins: 2 Din, 3 GND, 4 VCC3.3, 5 CLK, 6 GND, 7 Dout

## Multi_turn
designator R?  value 1K
Potentiometer; Sim Note: Enter the Resistance value and the set point into parameter fields.; Set Position: 0.5; Published: 8-Jun-2000; LatestRevisionDate: 17-Jul-2002; LatestRevisionNote: Re-released for DXP Platform.; PackageReference: VR5; Publisher: Altium Limited
footprint My_Pot_trim
simulation model POT (Potentiometer)
pins: 1 TOP, 2 BOT, 3 TAP
1 alternate drawing of the same symbol

## MULTITURN_H
designator *
footprint MY_MULTITURN_H
pins: 1 TOP, 2 TAP, 3 BOT

## NOKIA 6100 LCD
designator LCD?, comment 6100 LCD
NOKIA 6100 LCD
footprint MY_NOKIA6100_LCD
pins: 1 VDigital, 2 REST, 3 DIO, 4 SCK, 5 CS, 6 VDisplay, 7 NC, 8 GND, 9 LEDGND, 10 VLED+

## ON OFF SWITC B
designator S?
footprint MY_ONOFF_SWITCH_B
pins: 1, 2, 3

## ON OFF SWITCH
designator S?
footprint MY_ONOFF_SWITCH
pins: 1, 2, 3, 4 C hidden, 5 C hidden

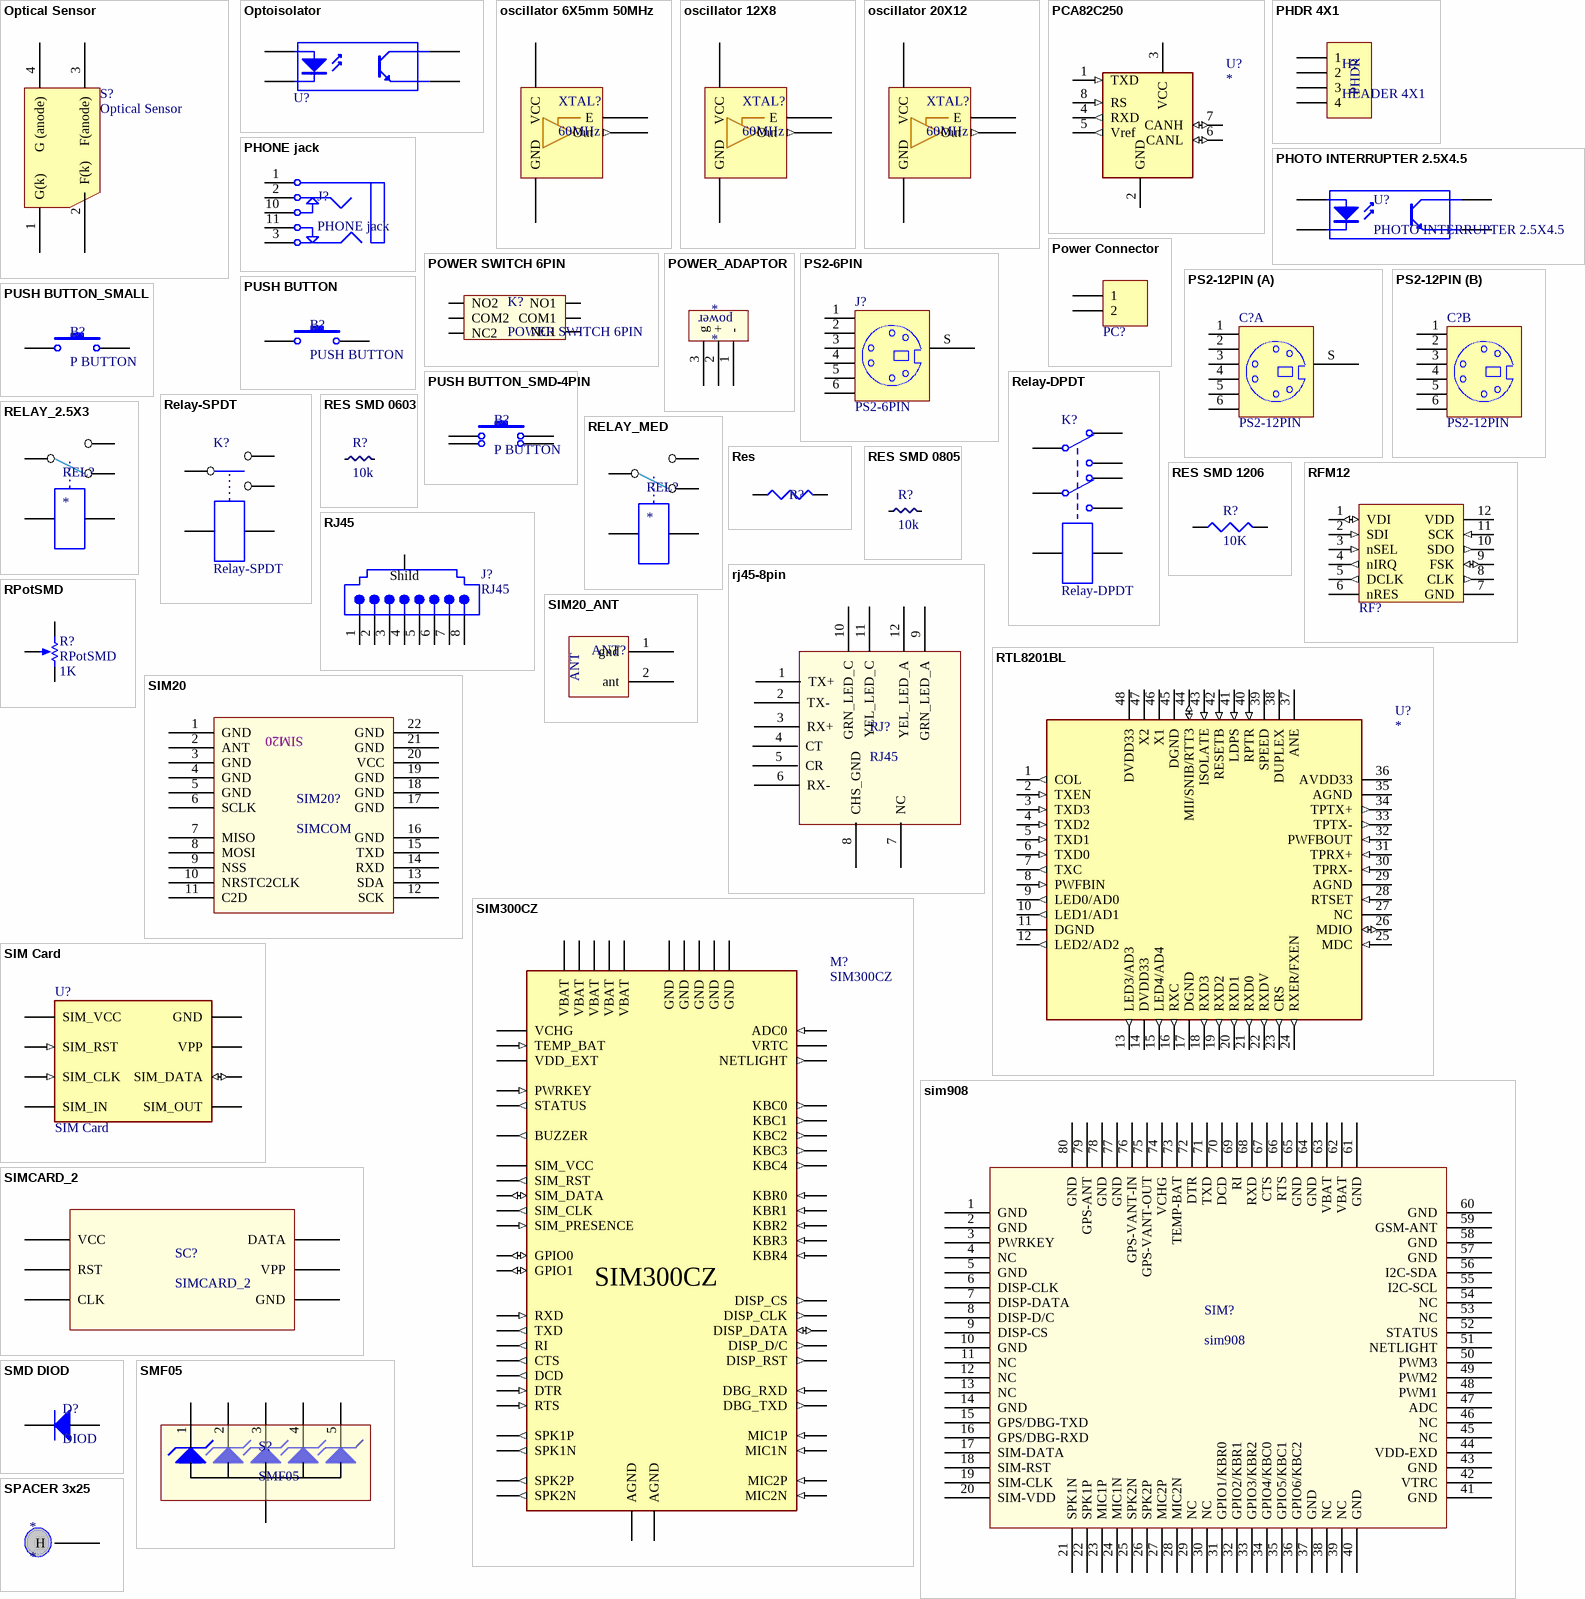
[diagram p8: symbols Optical Sensor to SPACER 3x25]

## Optical Sensor
designator S?
photo leflector on floor
footprint My_SNS 4
pins: 1 G(k), 2 F(k), 3 F(anode), 4 G (anode)

## Optoisolator
designator U?  (value not drawn)
footprint My_opto
pins: 1 A, 2 K, 3 C, 4 E

## oscillator 6X5mm 50MHz
designator XTAL?, comment 60MHz
Standard crystal oscillator 14-DIL; Value: 60MHz
footprint MY_CRYSTAL_SMD 6 X 3.3_50MHz
footprint MY_CRYSTAL_SMD 6 X 3.3_50MHz
pins: 1 E, 2 GND (power), 3 Out (out), 4 VCC (power)

## oscillator 12X8
designator XTAL?, comment 60MHz
Standard crystal oscillator 14-DIL; Value: 60MHz
footprint MY_oscillator 12x8mm
pins: 1 E, 7 GND (power), 8 Out (out), 14 VCC (power)

## oscillator 20X12
designator XTAL?, comment 60MHz
Standard crystal oscillator 14-DIL; Value: 60MHz
footprint MY_oscillator 20X12mm
pins: 1 E, 7 GND (power), 8 Out (out), 14 VCC (power)

## PCA82C250
designator U?
CAN controller interface
footprint My_8S2_M
3D model 8S2 (PCB3D Model)
pins: 1 TXD (in), 2 GND (power), 3 VCC (power), 4 RXD (out), 5 Vref (out), 6 CANL (io), 7 CANH (io), 8 RS (in)

## PHDR 4X1
designator H?, comment HEADER 4X1
footprint MY_PHDR 4X1
pins: 1, 2, 3, 4
text: PHDR

## PHONE jack
designator J?
STANDARD AUDIO JACK
footprint my_audio_jack
pins: 1, 2, 3, 10, 11

## PHOTO INTERRUPTER 2.5X4.5
designator U?
IR PHOTO INTERRUTER
footprint MY_PHOTO_INTERRUPTER
pins: 1 K, 2 A, 3 C, 4 E

## Power Connector
designator PC?  (value not drawn)
white Power Connector
footprint My_ Power_Connector
pins: 1, 2

## POWER SWITCH 6PIN
designator K?
7X7 mm
footprint SWITCH_ONOFF_6PIN
pins: 1 NO2, 2 COM2, 3 NC2, 4 NC1, 5 COM1, 6 NO1

## POWER_ADAPTOR
designator *
footprint MY_POWER_ADAPTOR
pins: 1 -, 2 +, 3 g
text: power

## PS2-6PIN
designator J?
6 Pin Through Hole PS2 Socket (Kycon P/N); Published: 17-Dec-2003; Publisher: Altium Limited; ComponentLink1Description: Manufacturer Link; ComponentLink1URL: http://www.oupiin.com/prodindx.html#Headers
footprint My_PS2-6PIN
signal-integrity model Connector
pins: 1, 2, 3, 4, 5, 6, S

## PS2-12PIN
designator C?
12 Pin Through Hole PS2 Socket (
footprint My_PS2_2
part A pins: 1, 2, 3, 4, 5, 6, S
part B pins: 7 1, 8 2, 9 3, 10 4, 11 5, 12 6

## PUSH BUTTON
designator B?
footprint MY_SPST_2
pins: 1, 2

## PUSH BUTTON_SMALL
designator B?, comment P BUTTON
footprint MY_SPST-0.5
footprint PUSH_SMD_2PIN
pins: 1, 2

## PUSH BUTTON_SMD-4PIN
designator B?, comment P BUTTON
footprint SMD_PUSH_4PIN
pins: 1, 2, 3, 4

## Relay-DPDT
designator K?
Dual-Pole Dual-Throw Relay; Published: 24-Mar-1999; LatestRevisionDate: 17-Jul-2002; LatestRevisionNote: Re-released for DXP Platform.; PackageReference: DIP-P8; Publisher: Altium Limited
footprint My_REL_cochick
pins: 1, 2, O1, O2, P1, P2, S1, S2

## Relay-SPDT
designator K?
standard single contact relay
footprint My_rel
pins: 1, 2, 3, 4, 5

## RELAY_2.5X3
designator REL?
NT90TNCE12CB 12V 30A
footprint MY_RELAY_3.1x2.6
pins: C1, C2, COM, NC, NO

## RELAY_MED
designator REL?
footprint MY_RELAY_MED
pins: 1, 2, 3, 4, 5

## Res
designator R?, comment 1k  (value not drawn)
resistor 1/4 wat
footprint My_axial-0.4
pins: 1, 2

## RES SMD 0603
designator R?, comment 10k
footprint MY_RES_SMD_0603
pins: 1, 2

## RES SMD 0805
designator R?, comment 10k
footprint MY_RES_SMD_0805
pins: 1, 2

## RES SMD 1206
designator R?, comment 10K
footprint MY_RES_SMD_1206
pins: 1, 2

## RFM12
designator RF?  (value not drawn)
Universal ISM Band FSK Transceiver Module
footprint My_RFM12 (RFM12 Transceiver)
pins: 1 VDI (io), 2 SDI (in), 3 nSEL (in), 4 nIRQ (out), 5 DCLK (out), 6 nRES, 7 GND (power), 8 CLK (out), 9 FSK (io), 10 SDO (out), 11 SCK (in), 12 VDD (power)

## RJ45
designator J?
Right Angle, Standard Profile, RJ45-Keyed, Flange Mount PCB Jack; Ports: 1; Positions/Loaded: Port1 - 8 Keyed/8; PerformanceCategory: 3; PCB_Mounting: Thru-Hole; ComponentAvailability: Obsolete; DrillSize: Nominal, Rounded to nearest 0.05mm; PCB_Layout: Complies with Manufacturer's Recommendation.; Published: 25-Jun-2002; DatasheetDocument: 18-Dec-2001; PackageDocument: 18-Dec-2001; PackageReference: 15-43-6233; Publisher: Altium Limited; ComponentLink1Description: Manufacturer Link; ComponentLink1URL: http://www.molex.com/; ComponentLink2Description: Datasheet; ComponentLink2URL: http://www.molex.com/cmc_upload/common_files/1212003_catalogmx41314.pdf; ComponentLink3Description: Iges Model; ComponentLink3URL: http://www.molex.com/pdm_docs/igs/15-43-6233_igs.zip
footprint My_RJ45
signal-integrity model Modular Jack
pins: 1, 2, 3, 4, 5, 6, 7, 8, shild Shild

## rj45-8pin
designator RJ?, comment RJ45
8 PIN RJ45 CONNECTOR WITH LED
footprint MY_rj45_8PIN
pins: 1 TX+ "SPACER", 2 TX- "SPACER", 3 RX+ "SPACER", 4 CT "SPACER", 5 CR "SPACER", 6 RX- "SPACER", 7 NC "SPACER", 8 CHS_GND "SPACER", 9 GRN_LED_A "SPACER", 10 GRN_LED_C "SPACER", 11 YEL_LED_C "SPACER", 12 YEL_LED_A "SPACER"

## RPotSMD
designator R?  value 1K
Potentiometer; Sim Note: Enter the Resistance value and the set point into parameter fields.; Set Position: 0.5; Published: 8-Jun-2000; LatestRevisionDate: 17-Jul-2002; LatestRevisionNote: Re-released for DXP Platform.; PackageReference: VR5; Publisher: Altium Limited
footprint My_Pot
simulation model POT (Potentiometer)
footprint MY_TRIM_POT
pins: 1 TOP, 2 BOT, 3 TAP
1 alternate drawing of the same symbol

## RTL8201BL
designator U?
SINGLE PORT 10/100M  FAST ETHERNET PHYCEIVER
footprint MY_LQFP48 (TSQFP, 48-Leads, Body 9.0x9.0mm (max), Pitch 0.50mm, IPC Medium Density)
3D model AT90C8534-48A (PCB3D Model)
pins: 1 COL (out), 2 TXEN (in), 3 TXD3 (in), 4 TXD2 (in), 5 TXD1 (in), 6 TXD0 (in), 7 TXC (out), 8 PWFBIN (in), 9 LED0/AD0 (out), 10 LED1/AD1 (out), 11 DGND (power), 12 LED2/AD2 (out), 13 LED3/AD3 (out), 14 DVDD33 (power), 15 LED4/AD4 (out), 16 RXC (out), 17 DGND (power), 18 RXD3 (out), 19 RXD2 (out), 20 RXD1 (out), 21 RXD0 (out), 22 RXDV (out), 23 CRS (out), 24 RXER/FXEN (out), 25 MDC (in), 26 MDIO (io), 27 NC (power), 28 RTSET (in), 29 AGND (power), 30 TPRX- (in), 31 TPRX+ (in), 32 PWFBOUT (in), 33 TPTX- (out), 34 TPTX+ (out), 35 AGND (power), 36 AVDD33 (power), 37 ANE (power), 38 DUPLEX (power), 39 SPEED (power), 40 RPTR (in), 41 LDPS (in), 42 RESETB (in), 43 ISOLATE (in), 44 MII/SNIB/RTT3 (io), 45 DGND (power), 46 X1, 47 X2, 48 DVDD33 (power)

## SIM20
designator SIM20?, comment SIMCOM
WIRELESS TRANSCIVER
footprint MY_SIM20_B
footprint MY_SIM20
pins: 1 GND, 2 ANT, 3 GND, 4 GND, 5 GND, 6 SCLK, 7 MISO, 8 MOSI, 9 NSS, 10 NRSTC2CLK, 11 C2D, 12 SCK, 13 SDA, 14 RXD, 15 TXD, 16 GND, 17 GND, 18 GND, 19 GND, 20 VCC, 21 GND, 22 GND

## SIM20_ANT
designator ANT?
ANT
footprint MY_SIM20_ANT
pins: 1 gnd, 2 ant

## SIM300CZ
designator M?
GSM/GPRS Module
footprint MY_SIM300
pins: 1 VBAT (power), 2 GND (power), 3 VBAT (power), 4 GND (power), 5 VBAT (power), 6 GND (power), 7 VBAT (power), 8 GND (power), 9 VBAT (power), 10 GND (power), 11 VCHG (power), 12 ADC0 (in), 13 TEMP_BAT (in), 14 VRTC, 15 VDD_EXT, 16 NETLIGHT (out), 17 PWRKEY (in), 18 KBC0 (out), 19 STATUS (out), 20 KBC1 (out), 21 GPIO0 (io), 22 KBC2 (out), 23 BUZZER (out), 24 KBC3 (out), 25 SIM_VCC (power), 26 KBC4 (out), 27 SIM_RST (out), 28 KBR0 (in), 29 SIM_DATA (io), 30 KBR1 (in), 31 SIM_CLK (out), 32 KBR2 (in), 33 SIM_PRESENCE (in), 34 KBR3 (in), 35 GPIO1 (io), 36 KBR4 (in), 37 DCD (out), 38 DISP_CS (out), 39 DTR (in), 40 DISP_CLK (out), 41 RXD (in), 42 DISP_DATA (io), 43 TXD (out), 44 DISP_D/C (out), 45 RTS (in), 46 DISP_RST (out), 47 CTS (out), 48 DBG_RXD (in), 49 RI (out), 50 DBG_TXD (out), 51 AGND (power), 52 AGND (power), 53 SPK1P (out), 54 MIC1P (in), 55 SPK1N (out), 56 MIC1N (in), 57 SPK2P (out), 58 MIC2P (in), 59 SPK2N (out), 60 MIC2N (in)

## sim908
designator SIM?
gps/gprs/gsm module
footprint MY_SIM908
pins: 1 GND, 2 GND, 3 PWRKEY, 4 NC, 5 GND, 6 DISP-CLK, 7 DISP-DATA, 8 DISP-D/C, 9 DISP-CS, 10 GND, 11 NC, 12 NC, 13 NC, 14 GND, 15 GPS/DBG-TXD, 16 GPS/DBG-RXD, 17 SIM-DATA, 18 SIM-RST, 19 SIM-CLK, 20 SIM-VDD, 21 SPK1N, 22 SPK1P, 23 MIC1P, 24 MIC1N, 25 SPK2N, 26 SPK2P, 27 MIC2P, 28 MIC2N, 29 NC, 30 NC, 31 GPIO1/KBR0, 32 GPIO2/KBR1, 33 GPIO3/KBR2, 34 GPIO4/KBC0, 35 GPIO5/KBC1, 36 GPIO6/KBC2, 37 GND, 38 NC, 39 NC, 40 GND, 41 GND, 42 VTRC, 43 GND, 44 VDD-EXD, 45 NC, 46 NC, 47 ADC, 48 PWM1, 49 PWM2, 50 PWM3, 51 NETLIGHT, 52 STATUS, 53 NC, 54 NC, 55 I2C-SCL, 56 I2C-SDA, 57 GND, 58 GND, 59 GSM-ANT, 60 GND, 61 GND, 62 VBAT, 63 VBAT, 64 GND, 65 GND, 66 RTS, 67 CTS, 68 RXD, 69 RI, 70 DCD, 71 TXD, 72 DTR, 73 TEMP-BAT, 74 VCHG, 75 GPS-VANT-OUT, 76 GPS-VANT-IN, 77 GND, 78 GND, 79 GPS-ANT, 80 GND

## SIM Card
designator U?
footprint MY_SIMCARD
pins: C1 SIM_VCC (power), C2 SIM_RST (in), C3 SIM_CLK (in), C4 SIM_IN, C5 GND (power), C6 VPP, C7 SIM_DATA (io), C8 SIM_OUT

## SIMCARD_2
designator SC?
sim card connector
footprint SIMCARD_2
pins: CLK, DATA, GND, RST, VCC, VPP

## SMD DIOD
designator D?, comment DIOD
footprint MY_SMD_DIOD
pins: A, K

## SMF05
designator S?
footprint MY_SMF05
pins: 1, 2, 3, 4, 5, GND

## SPACER 3x25
designator *
footprint MY_SPACER 3X25MM
pins: 0 H "SPACER"

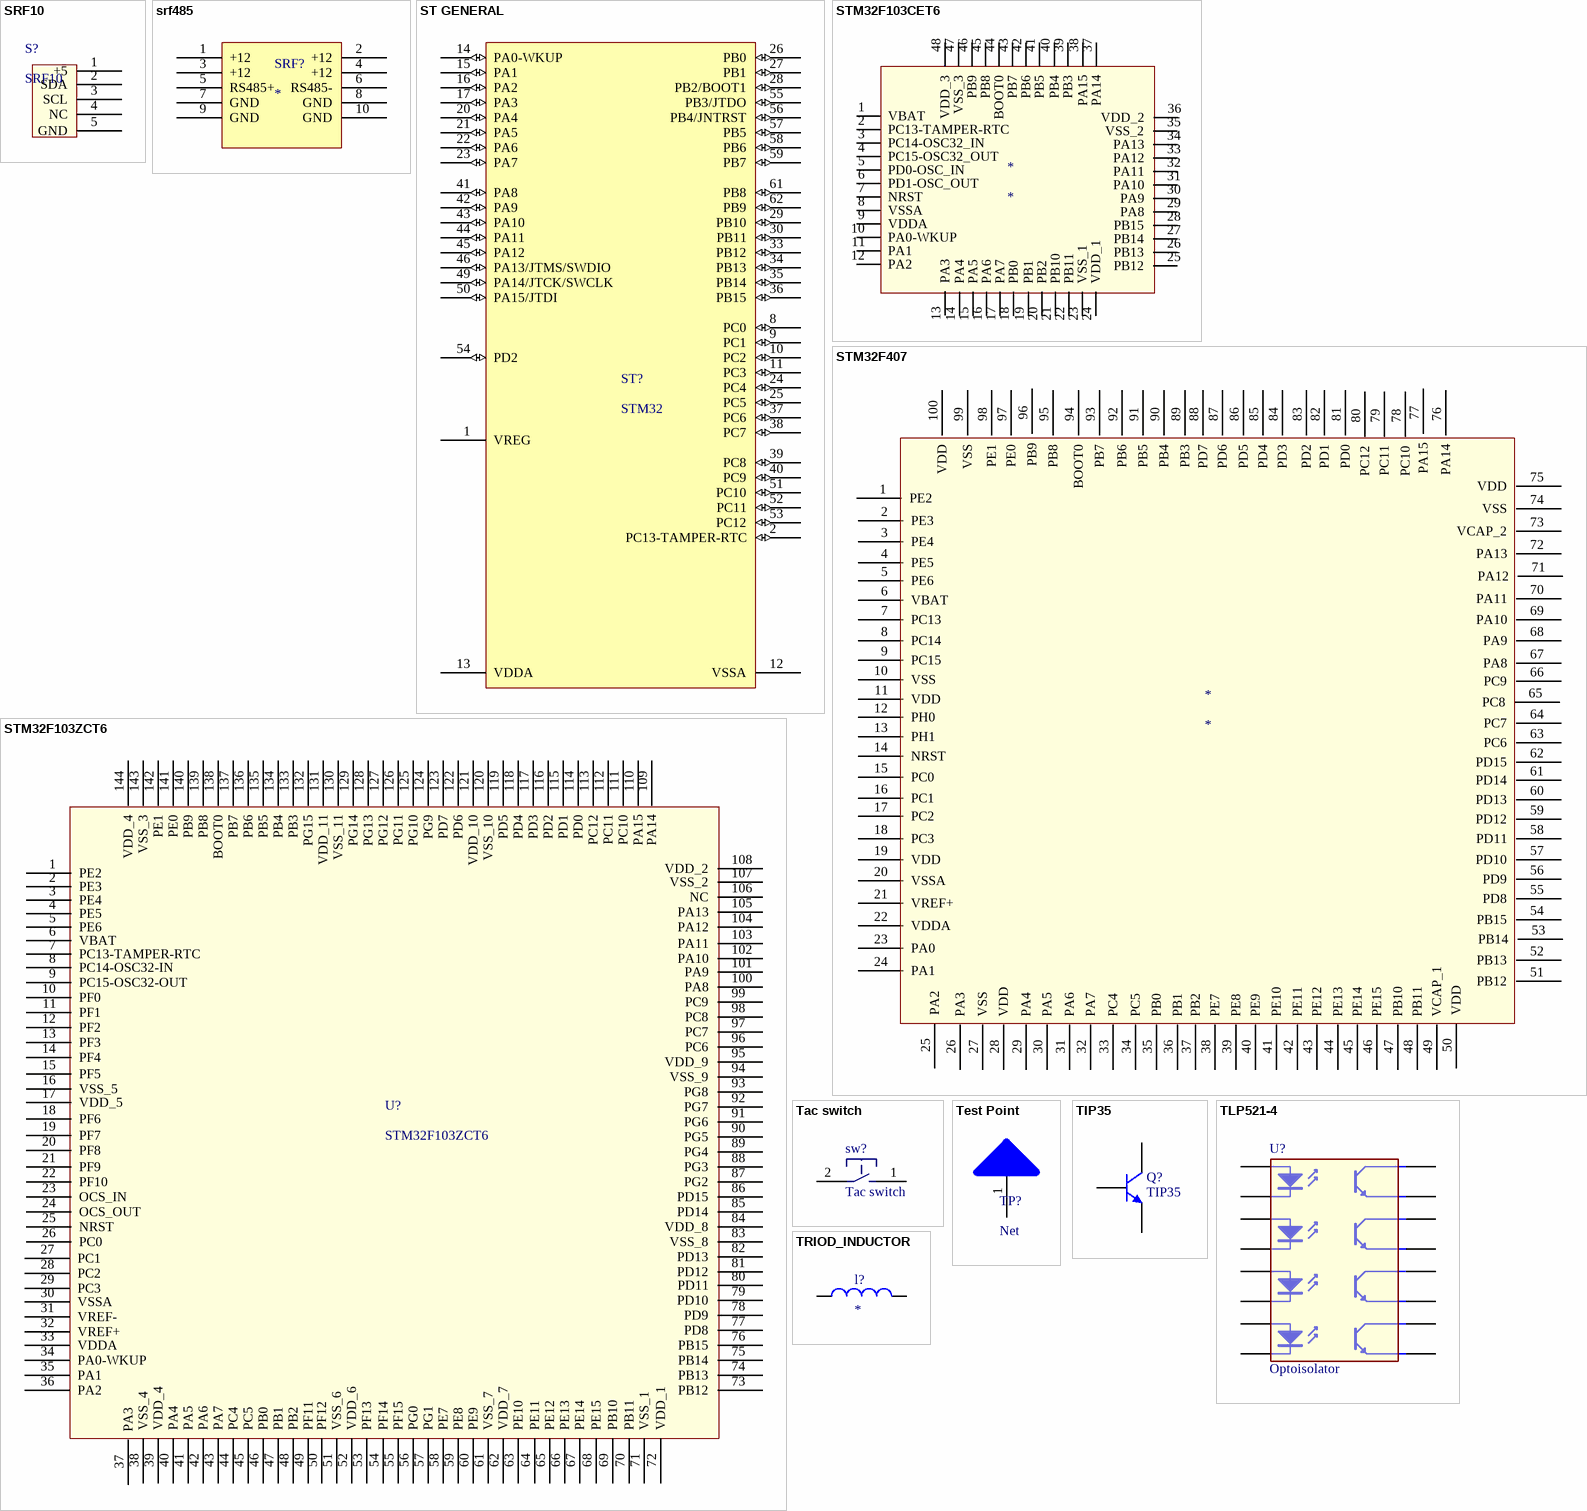
[diagram p9: symbols SRF10 to TRIOD_INDUCTOR]

## SRF10
designator S?
SRF10 Ultrasonic range finder
footprint MY_SRF10
pins: 1 +5, 2 SDA, 3 SCL, 4 NC, 5 GND

## srf485
designator SRF?
SONAR WITH RS485 PROTOCOL
footprint MY_SRF485
pins: 1 +12, 2 +12, 3 +12, 4 +12, 5 RS485+, 6 RS485-, 7 GND, 8 GND, 9 GND, 10 GND

## ST GENERAL
designator ST?, comment STM32
GENERAL BOARD STM32F103RBT6
footprint ST GENERAL
pins: 1 VREG (power), 2 PC13-TAMPER-RTC (io), 8 PC0 (io), 9 PC1 (io), 10 PC2 (io), 11 PC3 (io), 12 VSSA (power), 13 VDDA (power), 14 PA0-WKUP (io), 15 PA1 (io), 16 PA2 (io), 17 PA3 (io), 20 PA4 (io), 21 PA5 (io), 22 PA6 (io), 23 PA7 (io), 24 PC4 (io), 25 PC5 (io), 26 PB0 (io), 27 PB1 (io), 28 PB2/BOOT1 (io), 29 PB10 (io), 30 PB11 (io), 33 PB12 (io), 34 PB13 (io), 35 PB14 (io), 36 PB15 (io), 37 PC6 (io), 38 PC7 (io), 39 PC8 (io), 40 PC9 (io), 41 PA8 (io), 42 PA9 (io), 43 PA10 (io), 44 PA11 (io), 45 PA12 (io), 46 PA13/JTMS/SWDIO (io), 49 PA14/JTCK/SWCLK (io), 50 PA15/JTDI (io), 51 PC10 (io), 52 PC11 (io), 53 PC12 (io), 54 PD2 (io), 55 PB3/JTDO (io), 56 PB4/JNTRST (io), 57 PB5 (io), 58 PB6 (io), 59 PB7 (io), 61 PB8 (io), 62 PB9 (io)

## STM32F103CET6
designator *
signal-integrity model Model Name (Model Description)
pins: 1 VBAT, 2 PC13-TAMPER-RTC, 3 PC14-OSC32_IN, 4 PC15-OSC32_OUT, 5 PD0-OSC_IN, 6 PD1-OSC_OUT, 7 NRST, 8 VSSA, 9 VDDA, 10 PA0-WKUP, 11 PA1, 12 PA2, 13 PA3, 14 PA4, 15 PA5, 16 PA6, 17 PA7, 18 PB0, 19 PB1, 20 PB2, 21 PB10, 22 PB11, 23 VSS_1, 24 VDD_1, 25 PB12, 26 PB13, 27 PB14, 28 PB15, 29 PA8, 30 PA9, 31 PA10, 32 PA11, 33 PA12, 34 PA13, 35 VSS_2, 36 VDD_2, 37 PA14, 38 PA15, 39 PB3, 40 PB4, 41 PB5, 42 PB6, 43 PB7, 44 BOOT0, 45 PB8, 46 PB9, 47 VSS_3, 48 VDD_3

## STM32F103ZCT6
designator U?
High-density performance line ARM-based 32-bit MCU with 256 to  512KB Flash, USB, CAN, 11 timers, 3 ADCs, 13 communication interfaces
footprint MY_LQFP144
pins: 1 PE2, 2 PE3, 3 PE4, 4 PE5, 5 PE6, 6 VBAT, 7 PC13-TAMPER-RTC, 8 PC14-OSC32-IN, 9 PC15-OSC32-OUT, 10 PF0, 11 PF1, 12 PF2, 13 PF3, 14 PF4, 15 PF5, 16 VSS_5, 17 VDD_5, 18 PF6, 19 PF7, 20 PF8, 21 PF9, 22 PF10, 23 OCS_IN, 24 OCS_OUT, 25 NRST, 26 PC0, 27 PC1, 28 PC2, 29 PC3, 30 VSSA, 31 VREF-, 32 VREF+, 33 VDDA, 34 PA0-WKUP, 35 PA1, 36 PA2, 37 PA3, 38 VSS_4, 39 VDD_4, 40 PA4, 41 PA5, 42 PA6, 43 PA7, 44 PC4, 45 PC5, 46 PB0, 47 PB1, 48 PB2, 49 PF11, 50 PF12, 51 VSS_6, 52 VDD_6, 53 PF13, 54 PF14, 55 PF15, 56 PG0, 57 PG1, 58 PE7, 59 PE8, 60 PE9, 61 VSS_7, 62 VDD_7, 63 PE10, 64 PE11, 65 PE12, 66 PE13, 67 PE14, 68 PE15, 69 PB10, 70 PB11, 71 VSS_1, 72 VDD_1, 73 PB12, 74 PB13, 75 PB14, 76 PB15, 77 PD8, 78 PD9, 79 PD10, 80 PD11, 81 PD12, 82 PD13, 83 VSS_8, 84 VDD_8, 85 PD14, 86 PD15, 87 PG2, 88 PG3, 89 PG4, 90 PG5, 91 PG6, 92 PG7, 93 PG8, 94 VSS_9, 95 VDD_9, 96 PC6, 97 PC7, 98 PC8, 99 PC9, 100 PA8, 101 PA9, 102 PA10, 103 PA11, 104 PA12, 105 PA13, 106 NC, 107 VSS_2, 108 VDD_2, 109 PA14, 110 PA15, 111 PC10, 112 PC11, 113 PC12, 114 PD0, 115 PD1, 116 PD2, 117 PD3, 118 PD4, 119 PD5, 120 VSS_10, 121 VDD_10, 122 PD6, 123 PD7, 124 PG9, 125 PG10, 126 PG11, 127 PG12, 128 PG13, 129 PG14, 130 VSS_11, 131 VDD_11, 132 PG15, 133 PB3, 134 PB4, 135 PB5, 136 PB6, 137 PB7, 138 BOOT0, 139 PB8, 140 PB9, 141 PE0, 142 PE1, 143 VSS_3, 144 VDD_4

## STM32F407
designator *
pins: 1 PE2, 2 PE3, 3 PE4, 4 PE5, 5 PE6, 6 VBAT, 7 PC13, 8 PC14, 9 PC15, 10 VSS, 11 VDD, 12 PH0, 13 PH1, 14 NRST, 15 PC0, 16 PC1, 17 PC2, 18 PC3, 19 VDD, 20 VSSA, 21 VREF+, 22 VDDA, 23 PA0, 24 PA1, 25 PA2, 26 PA3, 27 VSS, 28 VDD, 29 PA4, 30 PA5, 31 PA6, 32 PA7, 33 PC4, 34 PC5, 35 PB0, 36 PB1, 37 PB2, 38 PE7, 39 PE8, 40 PE9, 41 PE10, 42 PE11, 43 PE12, 44 PE13, 45 PE14, 46 PE15, 47 PB10, 48 PB11, 49 VCAP_1, 50 VDD, 51 PB12, 52 PB13, 53 PB14, 54 PB15, 55 PD8, 56 PD9, 57 PD10, 58 PD11, 59 PD12, 60 PD13, 61 PD14, 62 PD15, 63 PC6, 64 PC7, 65 PC8, 66 PC9, 67 PA8, 68 PA9, 69 PA10, 70 PA11, 71 PA12, 72 PA13, 73 VCAP_2, 74 VSS, 75 VDD, 76 PA14, 77 PA15, 78 PC10, 79 PC11, 80 PC12, 81 PD0, 82 PD1, 83 PD2, 84 PD3, 85 PD4, 86 PD5, 87 PD6, 88 PD7, 89 PB3, 90 PB4, 91 PB5, 92 PB6, 93 PB7, 94 BOOT0, 95 PB8, 96 PB9, 97 PE0, 98 PE1, 99 VSS, 100 VDD

## Tac switch
designator sw?
small tac switch
footprint MY_TACTILE-PTH
footprint MY_TACTILE-PTH_4X
pins: 1, 2

## Test Point
designator TP?, comment Net
Test point
footprint MY_TestPin
pins: 1

## TIP35
designator Q?
power npn transistor
footprint My_TOP3
pins: B, C, E

## TLP521-4
designator U?, comment Optoisolator
4 Optoisolator's
footprint My_DIP-16
pins: 1 A, 2 K, 3 A, 4 K, 5 A, 6 K, 7 A, 8 K, 9 E, 10 C, 11 E, 12 C, 13 E, 14 C, 15 E, 16 C

## TRIOD_INDUCTOR
designator l?
footprint MY_TRIOD_INDUCTOR
pins: 1, 2

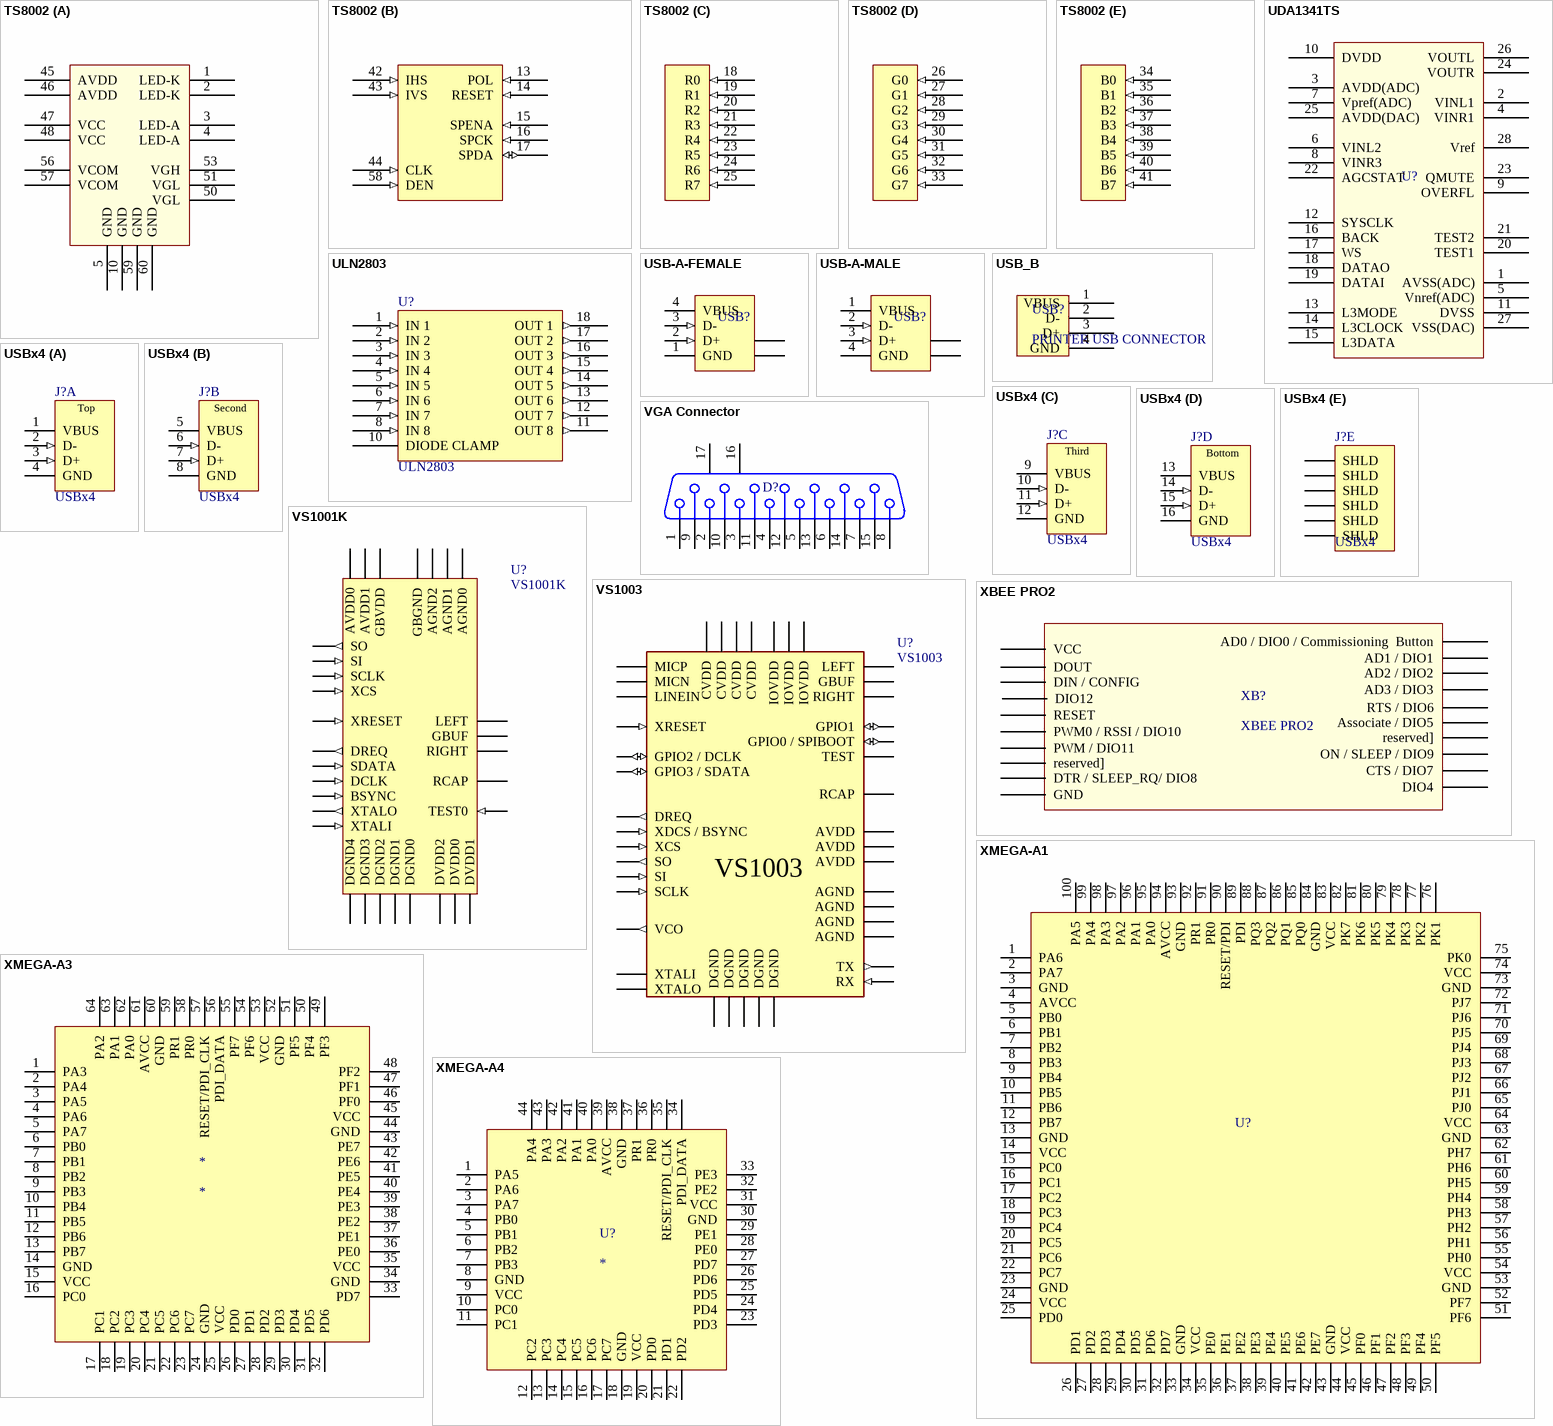
[diagram p10: symbols TS8002 to XMEGA-A4]

## TS8002
designator TFT?  (value not drawn)
320x240  24bit parallel TFT lcd
footprint MY_TFT_60 (TS8002 TFT lcd)
part A pins: 1 LED-K (power), 2 LED-K (power), 3 LED-A (power), 4 LED-A (power), 5 GND (power), 10 GND (power), 45 AVDD, 46 AVDD, 47 VCC, 48 VCC, 50 VGL, 51 VGL, 53 VGH, 56 VCOM, 57 VCOM, 59 GND (power), 60 GND (power)
part B pins: 13 POL (in), 14 RESET (in), 15 SPENA (in), 16 SPCK (in), 17 SPDA (io), 42 IHS (in), 43 IVS (in), 44 CLK (in), 58 DEN (in)
part C pins: 18 R0 (in), 19 R1 (in), 20 R2 (in), 21 R3 (in), 22 R4 (in), 23 R5 (in), 24 R6 (in), 25 R7 (in)
part D pins: 26 G0 (in), 27 G1 (in), 28 G2 (in), 29 G3 (in), 30 G4 (in), 31 G5 (in), 32 G6 (in), 33 G7 (in)
part E pins: 34 B0 (in), 35 B1 (in), 36 B2 (in), 37 B3 (in), 38 B4 (in), 39 B5 (in), 40 B6 (in), 41 B7 (in)

## UDA1341TS
designator U?
ECONOMY AUDIO CODEC FOR MINIDISC
footprint MY_UDA1341TS
pins: 1 AVSS(ADC), 2 VINL1, 3 AVDD(ADC), 4 VINR1, 5 Vnref(ADC), 6 VINL2, 7 Vpref(ADC), 8 VINR3, 9 OVERFL, 10 DVDD, 11 DVSS, 12 SYSCLK, 13 L3MODE, 14 L3CLOCK, 15 L3DATA, 16 BACK, 17 WS, 18 DATAO, 19 DATAI, 20 TEST1, 21 TEST2, 22 AGCSTAT, 23 QMUTE, 24 VOUTR, 25 AVDD(DAC), 26 VOUTL, 27 VSS(DAC), 28 Vref

## ULN2803
designator U?
HIGH-VOLTAGE,HIGH-CURRENT DARLINTON ARRAYS
footprint My_DIP-18
pins: 1 IN 1 (in), 2 IN 2 (in), 3 IN 3 (in), 4 IN 4 (in), 5 IN 5 (in), 6 IN 6 (in), 7 IN 7 (in), 8 IN 8 (in), 9 GND (power) hidden to GND, 10 DIODE CLAMP, 11 OUT 8 (out), 12 OUT 7 (out), 13 OUT 6 (out), 14 OUT 5 (out), 15 OUT 4 (out), 16 OUT 3 (out), 17 OUT 2 (out), 18 OUT 1 (out)

## USB-A-FEMALE
designator USB?
USB TYPE A
footprint MY_USB_A_FEMALE
pins: 1 GND (power) "Ground", 2 D+ (in) "+DATA", 3 D- (in) "-DATA", 4 VBUS (power) "Power", 5 SHLD "Shield", 6 SHLD "Shield"

## USB-A-MALE
designator USB?
USB TYPE A
footprint MY_USB_A_MALE
pins: 1 VBUS (power) "Power", 2 D- (in) "-DATA", 3 D+ (in) "+DATA", 4 GND (power) "Ground", 5 SHLD "Shield", 6 SHLD "Shield"

## USB_B
designator USB?, comment PRINTER USB CONNECTOR
footprint MY_USB_B
pins: 1 VBUS, 2 D-, 3 D+, 4 GND

## USBx4
designator J?
USB 1.1, Right Angle, Thru-Hole, A Type, Receptacle, 4x4x4x4 Position, Fourfold Stacked, Black; ContactMaterial: Phosphor Bronze; ContactPlating: Gold (30) over Nickel (50); TerminationLength: 2.36mm [0.093in.]; PCB_Layout: Complies with manufacturer's recommendation.; DrillSize: Corresponds to nominal value.; PanelGround: Without; Published: 15-Jul-2004; DatasheetDocument: 30-Jul-2002; PackageDocument: 30-Jul-2002; PackageReference: 1470007; Publisher: Altium Limited; HousingMaterial: 30% Glass-Filled Thermoplastic; ComponentLink1Description: Manufacturer Link; ComponentLink1URL: http://www.tycoelectronics.com/; ComponentLink2Description: Packaging Specification; ComponentLink2URL: http://ecommas.tycoelectronics.com/commerce/DocumentDelivery/DDEController?Action=showdoc&DocId=Customer+Drawing%7F1470007%7FO%7Fpdf%7FEnglish%7FENG_CD_1470007_O.pdf
footprint My_USB_4
signal-integrity model USB1.1
part A pins: 1 VBUS (power) "Power", 2 D- (in) "-DATA", 3 D+ (in) "+DATA", 4 GND (power) "Ground"
part B pins: 5 VBUS (power) "Power", 6 D- (in) "-DATA", 7 D+ (in) "+DATA", 8 GND (power) "Ground"
part C pins: 9 VBUS (power) "Power", 10 D- (in) "-DATA", 11 D+ (in) "+DATA", 12 GND (power) "Ground"
part D pins: 13 VBUS (power) "Power", 14 D- (in) "-DATA", 15 D+ (in) "+DATA", 16 GND (power) "Ground"
part E pins: 17 SHLD "Shield", 18 SHLD "Shield", 19 SHLD "Shield", 20 SHLD "Shield", 21 SHLD "Shield", 22 SHLD "Shield"
part A text: Top
part B text: Second
part C text: Third
part D text: Bottom

## VGA Connector
designator D?  (value not drawn)
Standard VGA Connector
footprint MY_VGA
pins: 1, 2, 3, 4, 5, 6, 7, 8, 9, 10, 11, 12, 13, 14, 15, 16 MH1, 17 MH2

## VS1001K
designator U?
Mp3 decoder
footprint MY_LQFP48 (TSQFP, 48-Leads, Body 9.0x9.0mm (max), Pitch 0.50mm, IPC Medium Density)
pins: 3 XRESET (in), 4 DGND0 (power), 6 DVDD0 (power), 8 DREQ (out), 9 DCLK (in), 10 SDATA (in), 13 BSYNC (in), 14 DVDD1 (power), 16 DGND1 (power), 17 XTALO (out), 18 XTALI (in), 19 DVDD2 (power), 20 DGND2 (power), 21 DGND3 (power), 22 DGND4 (power), 23 XCS (in), 28 SCLK (in), 29 SI (in), 30 SO (out), 32 TEST0 (in), 37 AGND0 (power), 38 AVDD0 (power), 39 RIGHT, 40 AGND1 (power), 41 GBGND (power), 42 GBUF, 43 GBVDD (power), 44 RCAP, 45 AVDD1 (power), 46 LEFT, 47 AGND2 (power)

## VS1003
designator U?
MP3 Decoder
footprint MY_LQFP48 (TSQFP, 48-Leads, Body 9.0x9.0mm (max), Pitch 0.50mm, IPC Medium Density)
pins: 1 MICP, 2 MICN, 3 XRESET (in), 4 DGND (power), 5 CVDD (power), 6 IOVDD (power), 7 CVDD (power), 8 DREQ (out), 9 GPIO2 / DCLK (io), 10 GPIO3 / SDATA (io), 13 XDCS / BSYNC (in), 14 IOVDD (power), 15 VCO (out), 16 DGND (power), 17 XTALO, 18 XTALI, 19 IOVDD (power), 20 DGND (power), 21 DGND (power), 22 DGND (power), 23 XCS (in), 24 CVDD (power), 26 RX (in), 27 TX (out), 28 SCLK (in), 29 SI (in), 30 SO (out), 31 CVDD (power), 32 TEST, 33 GPIO0 / SPIBOOT (io), 34 GPIO1 (io), 37 AGND (power), 38 AVDD (power), 39 RIGHT, 40 AGND (power), 41 AGND (power), 42 GBUF, 43 AVDD (power), 44 RCAP, 45 AVDD (power), 46 LEFT, 47 AGND (power), 48 LINEIN

## XBEE PRO2
designator XB?
XBEE PRO SERIES2
footprint MY_XBEE
pins: 1 VCC "SPACER", 2 DOUT "SPACER", 3 DIN / CONFIG "SPACER", 4 DIO12 "SPACER", 5 RESET "SPACER", 6 PWM0 / RSSI / DIO10 "SPACER", 7 PWM / DIO11 "SPACER", 8 reserved] "SPACER", 9 DTR / SLEEP_RQ/ DIO8 "SPACER", 10 GND "SPACER", 11 DIO4 "SPACER", 12 CTS / DIO7 "SPACER", 13 ON / SLEEP / DIO9 "SPACER", 14 reserved] "SPACER", 15 Associate / DIO5 "SPACER", 16 RTS / DIO6 "SPACER", 17 AD3 / DIO3 "SPACER", 18 AD2 / DIO2 "SPACER", 19 AD1 / DIO1 "SPACER", 20 AD0 / DIO0 / Commissioning  Button "SPACER"

## XMEGA-A1
designator U?
ATMEL
footprint MY_TQFP 100 (TSQFP, 100-Leads, Body 16.0x16.0mm (max), Pitch 0.50mm, IPC Medium Density)
pins: 1 PA6, 2 PA7, 3 GND, 4 AVCC, 5 PB0, 6 PB1, 7 PB2, 8 PB3, 9 PB4, 10 PB5, 11 PB6, 12 PB7, 13 GND, 14 VCC, 15 PC0, 16 PC1, 17 PC2, 18 PC3, 19 PC4, 20 PC5, 21 PC6, 22 PC7, 23 GND, 24 VCC, 25 PD0, 26 PD1, 27 PD2, 28 PD3, 29 PD4, 30 PD5, 31 PD6, 32 PD7, 33 GND, 34 VCC, 35 PE0, 36 PE1, 37 PE2, 38 PE3, 39 PE4, 40 PE5, 41 PE6, 42 PE7, 43 GND, 44 VCC, 45 PF0, 46 PF1, 47 PF2, 48 PF3, 49 PF4, 50 PF5, 51 PF6, 52 PF7, 53 GND, 54 VCC, 55 PH0, 56 PH1, 57 PH2, 58 PH3, 59 PH4, 60 PH5, 61 PH6, 62 PH7, 63 GND, 64 VCC, 65 PJ0, 66 PJ1, 67 PJ2, 68 PJ3, 69 PJ4, 70 PJ5, 71 PJ6, 72 PJ7, 73 GND, 74 VCC, 75 PK0, 76 PK1, 77 PK2, 78 PK3, 79 PK4, 80 PK5, 81 PK6, 82 PK7, 83 VCC, 84 GND, 85 PQ0, 86 PQ1, 87 PQ2, 88 PQ3, 89 PDI, 90 RESET/PDI, 91 PR0, 92 PR1, 93 GND, 94 AVCC, 95 PA0, 96 PA1, 97 PA2, 98 PA3, 99 PA4, 100 PA5

## XMEGA-A3
designator *
ATMEL
footprint My_TQFP-64
pins: 1 PA3, 2 PA4, 3 PA5, 4 PA6, 5 PA7, 6 PB0, 7 PB1, 8 PB2, 9 PB3, 10 PB4, 11 PB5, 12 PB6, 13 PB7, 14 GND, 15 VCC, 16 PC0, 17 PC1, 18 PC2, 19 PC3, 20 PC4, 21 PC5, 22 PC6, 23 PC7, 24 GND, 25 VCC, 26 PD0, 27 PD1, 28 PD2, 29 PD3, 30 PD4, 31 PD5, 32 PD6, 33 PD7, 34 GND, 35 VCC, 36 PE0, 37 PE1, 38 PE2, 39 PE3, 40 PE4, 41 PE5, 42 PE6, 43 PE7, 44 GND, 45 VCC, 46 PF0, 47 PF1, 48 PF2, 49 PF3, 50 PF4, 51 PF5, 52 GND, 53 VCC, 54 PF6, 55 PF7, 56 PDI_DATA, 57 RESET/PDI_CLK, 58 PR0, 59 PR1, 60 GND, 61 AVCC, 62 PA0, 63 PA1, 64 PA2

## XMEGA-A4
designator U?
ATMEL
footprint My_TQFP-44
pins: 1 PA5, 2 PA6, 3 PA7, 4 PB0, 5 PB1, 6 PB2, 7 PB3, 8 GND, 9 VCC, 10 PC0, 11 PC1, 12 PC2, 13 PC3, 14 PC4, 15 PC5, 16 PC6, 17 PC7, 18 GND, 19 VCC, 20 PD0, 21 PD1, 22 PD2, 23 PD3, 24 PD4, 25 PD5, 26 PD6, 27 PD7, 28 PE0, 29 PE1, 30 GND, 31 VCC, 32 PE2, 33 PE3, 34 PDI_DATA, 35 RESET/PDI_CLK, 36 PR0, 37 PR1, 38 GND, 39 AVCC, 40 PA0, 41 PA1, 42 PA2, 43 PA3, 44 PA4

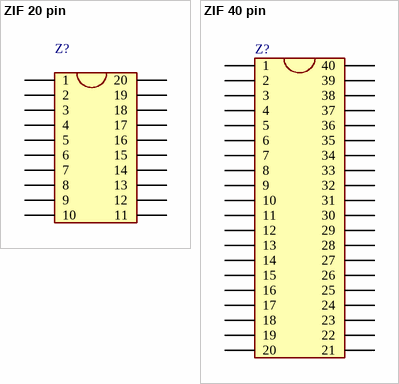
[diagram p11: symbols ZIF 20 pin to ZIF 40 pin]

## ZIF 20 pin
designator Z?, comment ZIF Socket  (value not drawn)
footprint MY_ZIF20
pins: 1, 2, 3, 4, 5, 6, 7, 8, 9, 10, 11, 12, 13, 14, 15, 16, 17, 18, 19, 20

## ZIF 40 pin
designator Z?, comment ZIF Socket  (value not drawn)
footprint MY_ZIF40
pins: 1, 2, 3, 4, 5, 6, 7, 8, 9, 10, 11, 12, 13, 14, 15, 16, 17, 18, 19, 20, 21, 22, 23, 24, 25, 26, 27, 28, 29, 30, 31, 32, 33, 34, 35, 36, 37, 38, 39, 40